# Altium integrated library StudentsLibrary.IntLib: 806 symbols (part 5 of 10)
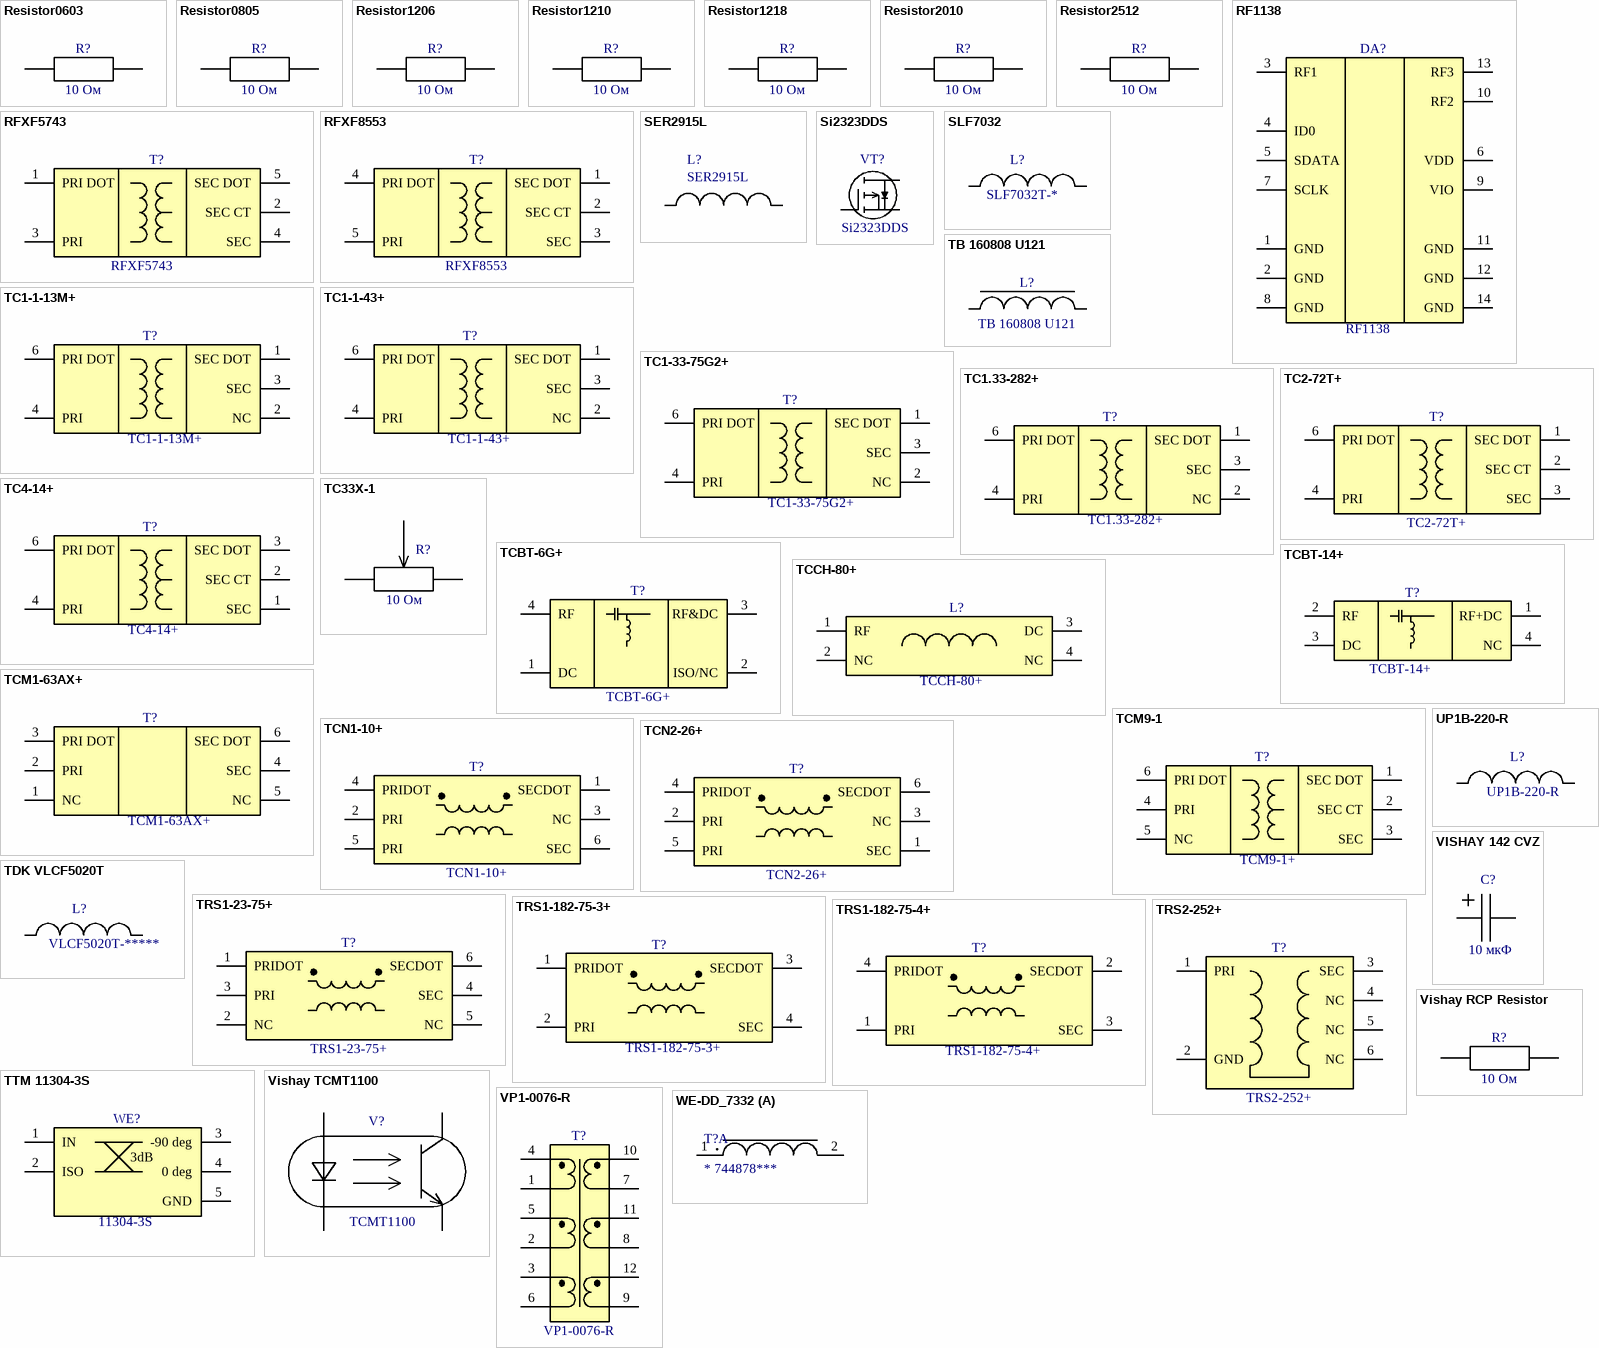
[diagram p51: symbols Resistor0603 to WE-DD_7332]

## VISHAY 142 CVZ
designator C?, comment 10 мкФ
Aluminum Electrolytic Capacitors SMD (Chip), High Temperature, Low Impedance; PartNumber: MAL2142*******; Manufacturer: Vishay; Tolerance: ±20%; Value: 10 мкФ; VDC: *; Package: *; ESR: *
footprint VISHAY 142 CVZ 0406 (VISHAY CAPAE 142 CVZ 4x4x5.7)
footprint VISHAY 142 CVZ 0506 (VISHAY CAPAE 142 CVZ 4x5x5.7)
footprint VISHAY 142 CVZ 0606 (VISHAY CAPAE 142 CVZ 6.3x6.3x5.7)
footprint VISHAY 142 CVZ 0608 (VISHAY CAPAE 142 CVZ 6.3x6.3x7.7)
footprint VISHAY 142 CVZ 0807 (VISHAY CAPAE 142 CVZ 8x8x6.5)
footprint VISHAY 142 CVZ 0810 (VISHAY CAPAE 142 CVZ 8x8x10)
footprint VISHAY 142 CVZ 1010 (VISHAY CAPAE 142 CVZ 10x10x10)
footprint VISHAY 142 CVZ 1213 (VISHAY CAPAE 142 CVZ 12.5x12.5x12.5)
pins: 1, 2

## Vishay RCP Resistor
designator R?, comment 10 Ом
Thick Film Chip Resistors, Industrial, High Power, Aluminum Nitride Substrate, RCP Series, Vishay; PartNumber: RCP0505*; Value: 10 Ом; Tolerance: *; Power: *; Manufacturer: Vishay; Package: 0505
footprint Vishay RCP0505B (Resistor, Chip; 1.40 mm L X 1.27 mm W X 0.64 mm H body)
footprint Vishay RCP0505W (Resistor, Chip; 1.40 mm L X 1.27 mm W X 0.64 mm H body)
pins: 1, 2

## Vishay TCMT1100
designator V?, comment TCMT1100
Optocoupler, Phototransistor Output, Single  Channel, Half Pitch Mini-Flat Package; Manufacturer: Vishay; PartNumber: TCMT1100; ComponentLink1Description: Product Page; ComponentLink1URL: https://www.vishay.com/en/product/83510/; ComponentLink2Description: DataSheet; ComponentLink2URL: https://www.vishay.com/docs/83510/tcmt11.pdf
footprint SOIC4P127_260X700X220L55X40N (Small Outline IC (SOIC), 1.27 mm pitch; 4 pin, 2.60 mm L X 4.40 mm W X 2.20 mm H body)
pins: 1 VD_A, 2 VD_C, 3 VT_E "emitter", 4 VT_C "collector"

## VP1-0076-R
designator T?
1:1 x6 Transformer. Power ranges from 1 W to 70 W while frequency ranges to over 1 MHz.; Manufacturer: Eaton; PartNumber: VP1-0076-R; ComponentLink1Description: ProductPage; ComponentLink1URL: https://www.eaton.com/us/en-us/catalog/electronic-components/vp-transformer.html
footprint EATON VP-1 (EATON VP-1 Transformer)
pins: 1, 2, 3, 4, 5, 6, 7, 8, 9, 10, 11, 12

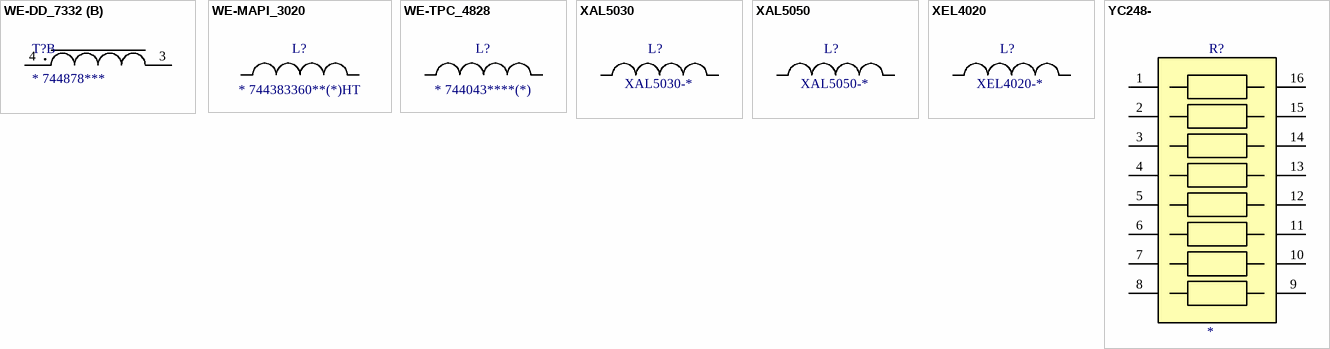
[diagram p15: symbols WE-DD_7332 to YC248-]

## WE-DD_7332
designator T?, comment * 744878***
WE-DD SMT Shielded Coupled Inductor, 1:1; Manufacturer: Wurth Elektronik; Config: Straight; Value: *; Tolerance: *; DCR: *; SRF: *; ISAT: *; IRMS: *; ComponentLink1Description: Product Page; ComponentLink1URL: https://www.we-online.com/en/components/products/WE-DD; PartNumber: 744878***
footprint WE-DD_7332 (SMT Shielded Coupled Inductor, 4-Leads, body 7.3x7.3mm)
part A pins: 1, 2
part B pins: 3, 4

## WE-MAPI_3020
designator L?, comment * 744383360**(*)HT
SMT Shielded Power Inductor, body 3.00 x 3.00 mm; Manufacturer: Wurth Elektronik; Value: *; PartNumber: 744383360**(*)HT; Tolerance: *; DCR: *; IRMS: *; ISAT: *; SRF: *; ComponentLink1Description: Product Page; ComponentLink1URL: https://www.we-online.com/en/components/products/WE-MAPI#/articles/WE-MAPI-SIZE-3020-HT
footprint WE-MAPI_3020 (SMT Shielded Power Inductor, body 3.00 x 3.00 mm)
pins: 1, 2

## WE-TPC_4828
designator L?, comment * 744043****(*)
SMT Tiny Power Inductor, body 4.8x4.8x2.8mm; Manufacturer: Wurth Elektronik; Value: *; PartNumber: 744043****(*); Tolerance: *; DCR: *; IRMS: *; ISAT: *; SRF: *
footprint WE-TPC_4828 (SMT Tiny Power Inductor, body 4.8x4.8x2.8mm)
pins: 1, 2

## XAL5030
designator L?, comment XAL5030-*
Colicraft Shielded Power Inductors; Manufacturer: Coilcraft; Tolerance: ±20%; PartNumber: XAL5030-*; Value: *; DCR: *; SRF: *; ISAT: *; ComponentLink1Description: Product Page; ComponentLink1URL: https://www.coilcraft.com/en-us/products/power/shielded-inductors/molded-inductor/xal/xal50xx/; IRMS: *
footprint XAL5030 (Coilcraft XAL5030- series)
pins: 1, 2

## XAL5050
designator L?, comment XAL5050-*
Colicraft Shielded Power Inductors; Manufacturer: Coilcraft; Tolerance: ±20%; PartNumber: XAL5050-*; Value: *; DCR: *; SRF: *; ISAT: *; ComponentLink1Description: Product Page; ComponentLink1URL: https://www.coilcraft.com/en-us/products/power/shielded-inductors/molded-inductor/xal/xal50xx/; IRMS: *
footprint XAL5050 (Coilcraft XAL5050- series)
pins: 1, 2

## XEL4020
designator L?, comment XEL4020-*
Colicraft Shielded Power Inductors; Manufacturer: Coilcraft; Tolerance: ±20%; PartNumber: XEL4020-*; Value: *; DCR: *; SRF: *; ISAT: *; ComponentLink1Description: Product Page; ComponentLink1URL: https://www.coilcraft.com/en-us/products/power/shielded-inductors/molded-inductor/xel/xel4020/xel4020-122/; IRMS: *
footprint XEL4020 (Coilcraft XEL4020- series)
pins: 1, 2

## YC248-
designator R?
Array Chip Resistor 16Pin/8R 5%, 1%, 0616; PartNumber: YC248-**-******; Manufacturer: Yageo; DCV: 50 В; Power: 1/16 Вт; Value: *; Tolerance: ±*; Package: 0616; ComponentLink1Description: Product Page; ComponentLink1URL: https://www.yageo.com/en/Product/Index/rchip/array_network/yc; ComponentLink2Description: DataSheet; ComponentLink2URL: https://www.yageo.com/upload/media/product/products/datasheet/rchip/PYu-YC_TC_group_51_RoHS_L_9.pdf
footprint RESCAXE16P50_400X160X55L40X45N (Resistor, Chip Array, 2 Side Convex, 0.50 mm pitch; 16 pin, 4.00 mm L X 1.60 mm W X 0.55 mm H body)
pins: 1, 2, 3, 4, 5, 6, 7, 8, 9, 10, 11, 12, 13, 14, 15, 16


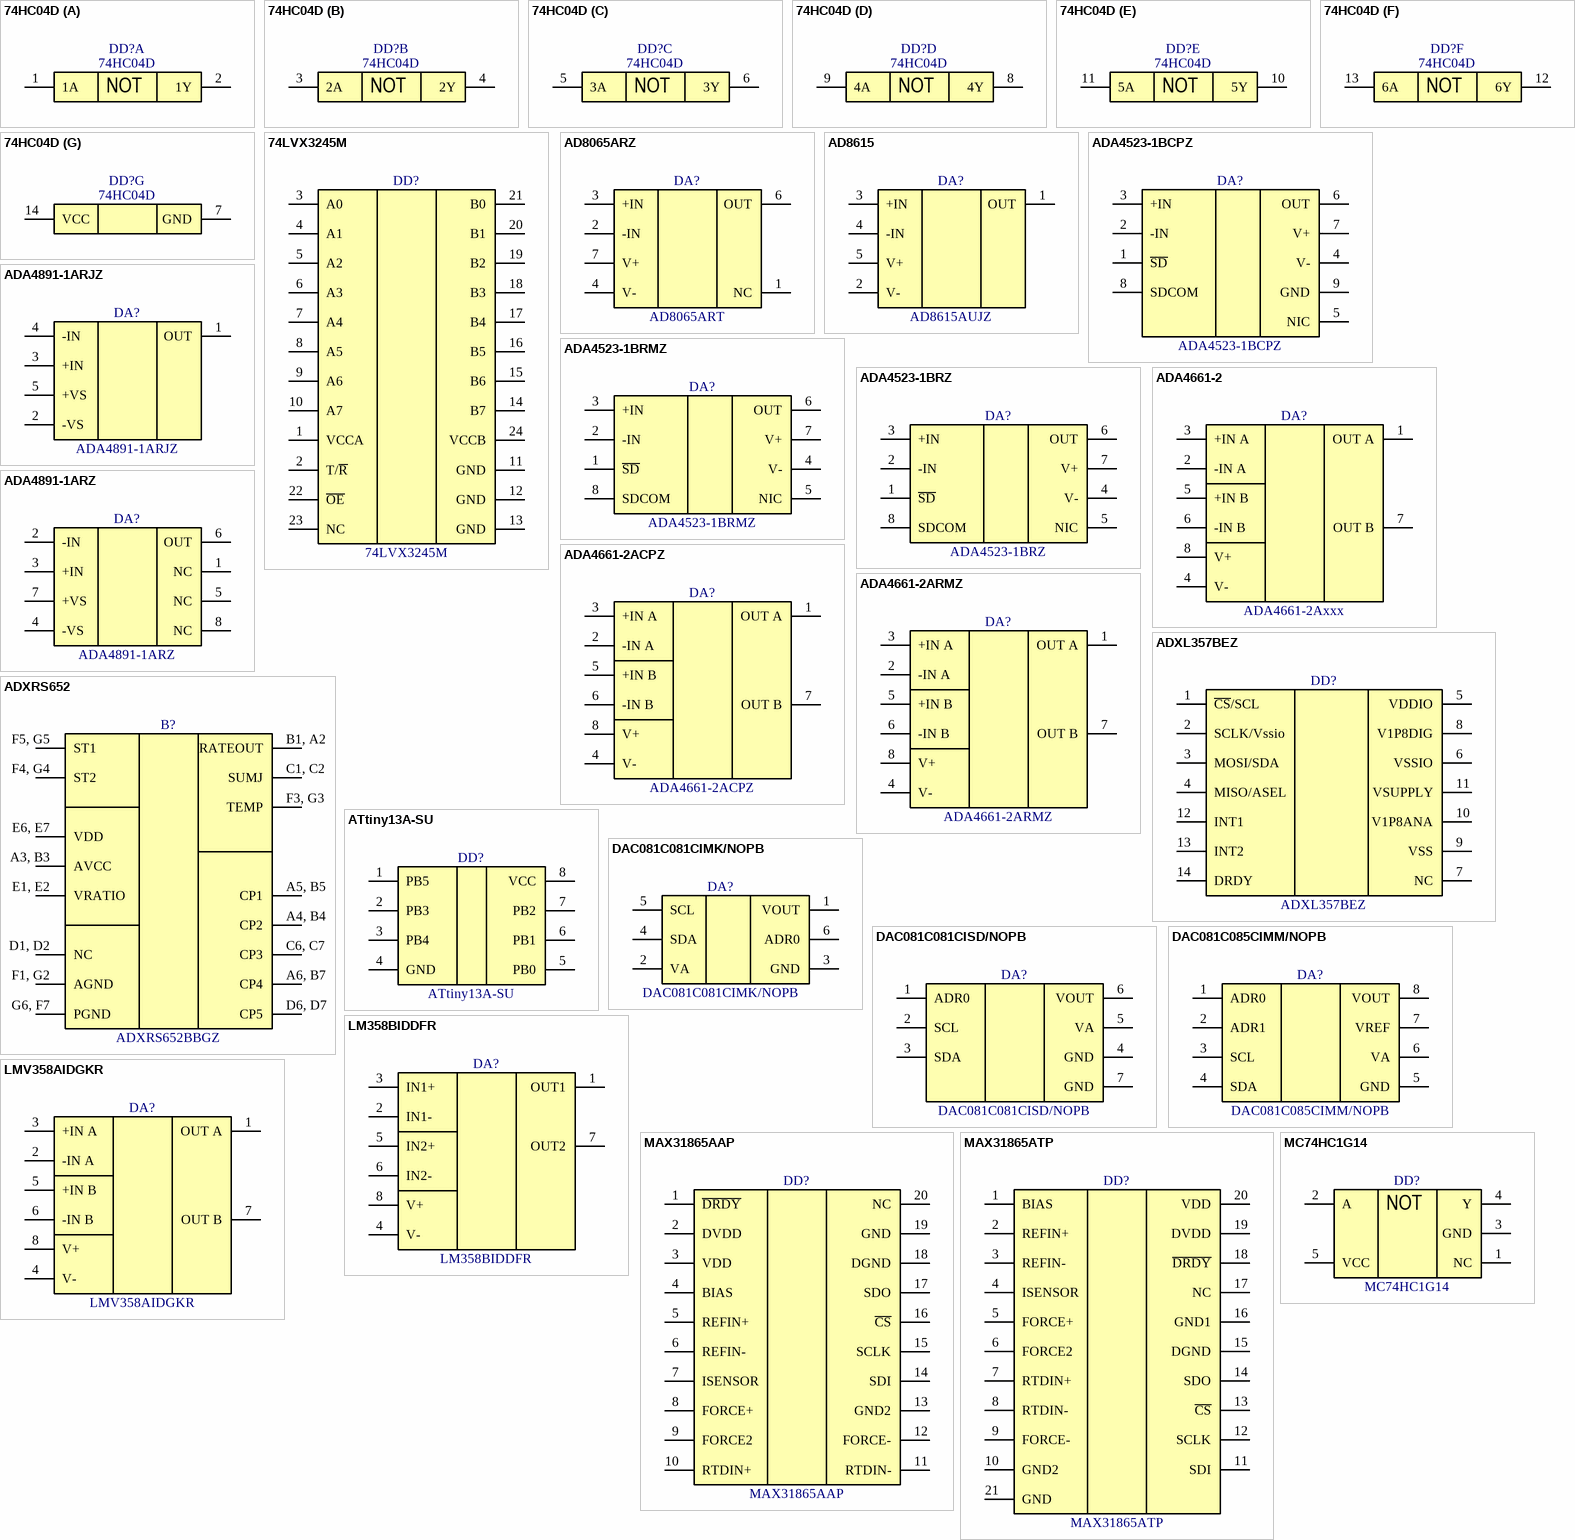
[diagram p16: symbols 74HC04D to MC74HC1G14]

## 74HC04D
designator DD?
Hex inverter; Manufacturer: OnSemi; PartNumber: 74HC04D; ComponentLink1Description: Digikey Datasheet Link; ComponentLink1URL: https://media.digikey.com/pdf/Data%20Sheets/ON%20Semiconductor%20PDFs/74HC04.pdf
footprint SOIC14P127_865X600X175L70X42N (Small Outline IC (SOIC), 1.27 mm pitch; 14 pin, 8.65 mm L X 3.90 mm W X 1.75 mm H body)
part A pins: 1 1A, 2 1Y
part B pins: 3 2A, 4 2Y
part C pins: 5 3A, 6 3Y
part D pins: 8 4Y, 9 4A
part E pins: 10 5Y, 11 5A
part F pins: 12 6Y, 13 6A
part G pins: 7 GND, 14 VCC
part A text: NOT
part B text: NOT
part C text: NOT
part D text: NOT
part E text: NOT
part F text: NOT

## 74LVX3245M
designator DD?
8-Bit Dual-Supply Translator with 3-State Outputs; Manufacturer: STMicroelectronics; PartNumber: 74LVX3245M
footprint SOP24P65_780X640X110L60X24N (Small Outline Pkg (SOP), 0.65 mm pitch; 24 pin, 7.80 mm L X 4.40 mm W X 1.10 mm H body)
pins: 1 VCCA, 2 T/~{R}, 3 A0, 4 A1, 5 A2, 6 A3, 7 A4, 8 A5, 9 A6, 10 A7, 11 GND, 12 GND, 13 GND, 14 B7, 15 B6, 16 B5, 17 B4, 18 B3, 19 B2, 20 B1, 21 B0, 22 ~{OE}, 23 NC, 24 VCCB

## AD8065ARZ
designator DA?, comment AD8065ART
High Performance, 145 MHz FastFET™ Op Amps / Single, SOIC_N; Manufacturer: Analog Devices; PartNumber: AD8065ART; ComponentLink1Description: Product Page; ComponentLink1URL: https://www.analog.com/en/products/ad8065.html; ComponentLink2Description: DataSheet; ComponentLink2URL: https://www.analog.com/media/en/technical-documentation/data-sheets/AD8065_8066.pdf
footprint SOIC8P127_490X600X175L83X41N (Small Outline IC (SOIC), 1.27 mm pitch; 8 pin, 4.90 mm L X 3.90 mm W X 1.75 mm H body)
pins: 1 NC, 2 -IN, 3 +IN, 4 V-, 6 OUT, 7 V+

## AD8615
designator DA?, comment AD8615AUJZ
Precision, 20 MHz, CMOS, Rail-to-Rail Input/Output Operational Amplifier; Manufacturer: Analog Devices; PartNumber: AD8615AUJZ; ComponentLink1Description: Product Page; ComponentLink1URL: https://www.analog.com/en/products/ad8615.html; ComponentLink2Description: DataSheet; ComponentLink2URL: https://www.analog.com/media/en/technical-documentation/data-sheets/AD8615_8616_8618.pdf
footprint SOT23-5P95_280X100L45X40N (Small Outline Transistor (SOT23), 0.95 mm pitch; 5 pin, 2.90 mm L X 1.60 mm W X 1.00 mm H body)
pins: 1 OUT, 2 V-, 3 +IN, 4 -IN, 5 V+

## ADA4523-1BCPZ
designator DA?
36 V, Low Noise, Zero Drift Op Amp, CP-8-29 (LFCSP); Manufacturer: Analog Devices; PartNumber: ADA4523-1BCPZ; ComponentLink1Description: Product Page; ComponentLink1URL: https://www.analog.com/en/products/ada4523-1.html; ComponentLink2Description: DataSheet; ComponentLink2URL: https://www.analog.com/media/en/technical-documentation/data-sheets/ada4523-1.pdf
footprint SON9P50_300X300X80L40X25T238X165N (Small Outline No-Lead (SON with Tab), 0.50 mm pitch; 8 pin, 3.00 mm L X 3.00 mm W X 0.80 mm H body)
pins: 1 ~{SD}, 2 -IN, 3 +IN, 4 V-, 5 NIC, 6 OUT, 7 V+, 8 SDCOM, 9 GND

## ADA4523-1BRMZ
designator DA?
36 V, Low Noise, Zero Drift Op Amp, RM-8 (MSOP); Manufacturer: Analog Devices; PartNumber: ADA4523-1BRMZ; ComponentLink1Description: Product Page; ComponentLink1URL: https://www.analog.com/en/products/ada4523-1.html; ComponentLink2Description: DataSheet; ComponentLink2URL: https://www.analog.com/media/en/technical-documentation/data-sheets/ada4523-1.pdf
footprint SOP8P65_300X490X110L60X32N (Small Outline Pkg (SOP), 0.65 mm pitch; 8 pin, 3.00 mm L X 3.00 mm W X 1.10 mm H body)
pins: 1 ~{SD}, 2 -IN, 3 +IN, 4 V-, 5 NIC, 6 OUT, 7 V+, 8 SDCOM

## ADA4523-1BRZ
designator DA?
36 V, Low Noise, Zero Drift Op Amp, R-8 (SOIC_N); Manufacturer: Analog Devices; PartNumber: ADA4523-1BRZ; ComponentLink1Description: Product Page; ComponentLink1URL: https://www.analog.com/en/products/ada4523-1.html; ComponentLink2Description: DataSheet; ComponentLink2URL: https://www.analog.com/media/en/technical-documentation/data-sheets/ada4523-1.pdf
footprint SOIC8P127_490X600X175L83X41N (Small Outline IC (SOIC), 1.27 mm pitch; 8 pin, 4.90 mm L X 3.90 mm W X 1.75 mm H body)
pins: 1 ~{SD}, 2 -IN, 3 +IN, 4 V-, 5 NIC, 6 OUT, 7 V+, 8 SDCOM

## ADA4661-2
designator DA?, comment ADA4661-2Axxx
18 V, Precision, 725 μA, 4 MHz, CMOS RRIO Operational Amplifier; Manufacturer: Analog Devices; PartNumber: ADA4661-2Axxx; ComponentLink1Description: Product Page; ComponentLink1URL: https://www.analog.com/en/products/ADA4661-2.html; ComponentLink2Description: DataSheet; ComponentLink2URL: https://www.analog.com/media/en/technical-documentation/data-sheets/ADA4661-2.pdf
footprint TSOP65P490X110-8N (TSOP, 8-Leads, Body 3.00x3.00mm, Pitch 0.65mm, IPC Medium Density)
footprint SON50P300X80_HS-9N (SON, 8-Leads, Body 3.00x3.00mm, Pitch 0.50mm, Thermal Pad 2.34x1.49mm, IPC Medium Density)
pins: 1 OUT A, 2 -IN A, 3 +IN A, 4 V-, 5 +IN B, 6 -IN B, 7 OUT B, 8 V+

## ADA4661-2ACPZ
designator DA?
18 V, Precision, 725 μA, 4 MHz, CMOS RRIO Operational Amplifier, CP-8-11 (LFCSP_WD); Manufacturer: Analog Devices; PartNumber: ADA4661-2ACPZ; ComponentLink1Description: Product Page; ComponentLink1URL: https://www.analog.com/en/products/ADA4661-2.html; ComponentLink2Description: DataSheet; ComponentLink2URL: https://www.analog.com/media/en/technical-documentation/data-sheets/ADA4661-2.pdf
footprint SON50P300X80_HS-9N (SON, 8-Leads, Body 3.00x3.00mm, Pitch 0.50mm, Thermal Pad 2.34x1.49mm, IPC Medium Density)
pins: 1 OUT A, 2 -IN A, 3 +IN A, 4 V-, 5 +IN B, 6 -IN B, 7 OUT B, 8 V+

## ADA4661-2ARMZ
designator DA?
18 V, Precision, 725 μA, 4 MHz, CMOS RRIO Operational Amplifier, RM-8 (MSOP); Manufacturer: Analog Devices; PartNumber: ADA4661-2ARMZ; ComponentLink1Description: Product Page; ComponentLink1URL: https://www.analog.com/en/products/ADA4661-2.html; ComponentLink2Description: DataSheet; ComponentLink2URL: https://www.analog.com/media/en/technical-documentation/data-sheets/ADA4661-2.pdf
footprint TSOP65P490X110-8N (TSOP, 8-Leads, Body 3.00x3.00mm, Pitch 0.65mm, IPC Medium Density)
pins: 1 OUT A, 2 -IN A, 3 +IN A, 4 V-, 5 +IN B, 6 -IN B, 7 OUT B, 8 V+

## ADA4891-1ARJZ
designator DA?
Low Cost CMOS, High Speed, Rail-to-Rail Amplifiers, SOT-23; Manufacturer: Analog Devices; PartNumber: ADA4891-1ARJZ; ComponentLink1Description: Product Page; ComponentLink1URL: https://www.analog.com/en/products/ada4891-1.html; ComponentLink2Description: DataSheet; ComponentLink2URL: https://www.analog.com/media/en/technical-documentation/data-sheets/ADA4891-1_4891-2_4891-3_4891-4.PDF
footprint SOT23-5P95_280X145L45X42N (Small Outline Transistor (SOT23), 0.95 mm pitch; 5 pin, 2.90 mm L X 1.60 mm W X 1.45 mm H body)
pins: 1 OUT, 2 -VS, 3 +IN, 4 -IN, 5 +VS

## ADA4891-1ARZ
designator DA?
Low Cost CMOS, High Speed, Rail-to-Rail Amplifiers, SOIC_N; Manufacturer: Analog Devices; PartNumber: ADA4891-1ARZ; ComponentLink1Description: Product Page; ComponentLink1URL: https://www.analog.com/en/products/ada4891-1.html; ComponentLink2Description: DataSheet; ComponentLink2URL: https://www.analog.com/media/en/technical-documentation/data-sheets/ADA4891-1_4891-2_4891-3_4891-4.PDF
footprint SOIC8P127_490X600X175L83X41N (Small Outline IC (SOIC), 1.27 mm pitch; 8 pin, 4.90 mm L X 3.90 mm W X 1.75 mm H body)
pins: 1 NC, 2 -IN, 3 +IN, 4 -VS, 5 NC, 6 OUT, 7 +VS, 8 NC

## ADXL357BEZ
designator DD?
Low Noise, Low Drift, Low Power, 3-Axis MEMS Accelerometers; Manufacturer: Analog Devices; PartNumber: ADXL357BEZ; ComponentLink1Description: Product Page; ComponentLink1URL: https://www.analog.com/en/products/ADXL357.html; ComponentLink2Description: DataSheet; ComponentLink2URL: https://www.analog.com/media/en/technical-documentation/data-sheets/adxl356-357.pdf
footprint LCCS14P127_605X605X220L91X50N (Leadless Chip Carrier (LCC), 1.27 mm pitch; square, 4 pin X 3 pin, 6.05 mm L X 6.05 mm W X 2.20 mm H body)
pins: 1 ~{CS}/SCL, 2 SCLK/Vssio, 3 MOSI/SDA, 4 MISO/ASEL, 5 VDDIO, 6 VSSIO, 7 NC, 8 V1P8DIG, 9 VSS, 10 V1P8ANA, 11 VSUPPLY, 12 INT1, 13 INT2, 14 DRDY

## ADXRS652
designator B?, comment ADXRS652BBGZ
±250°/sec Yaw Rate Gyro; Manufacturer: Analog Devices; PartNumber: ADXRS652BBGZ; ComponentLink1Description: Product Page; ComponentLink1URL: https://www.analog.com/en/products/adxrs652.html; ComponentLink2Description: DataSheet; ComponentLink2URL: https://www.analog.com/media/en/technical-documentation/data-sheets/ADXRS652.pdf; ComponentLink3Description: User Guide; ComponentLink3URL: https://www.analog.com/media/en/technical-documentation/user-guides/UG-153.pdf
footprint BGA32CP80_7X7_687X687X380B55N (Ball Grid Array (BGA), 0.80 mm pitch, square; 32 pin, 6.875 mm L X 6.875 mm W X 3.80 mm H body)
pins: A3, B3 AVCC, A4, B4 CP2, A5, B5 CP1, A6, B7 CP4, B1, A2 RATEOUT, C1, C2 SUMJ, C6, C7 CP3, D1, D2 NC, D6, D7 CP5, E1, E2 VRATIO, E6, E7 VDD, F1, G2 AGND, F3, G3 TEMP, F4, G4 ST2, F5, G5 ST1, G6, F7 PGND

## ATtiny13A-SU
designator DD?
Microcontroller with 1K Bytes / In-System Programmable Flash; Manufacturer: Microchip; PartNumber: ATtiny13A-SU; ComponentLink1Description: Product Page; ComponentLink1URL: https://www.microchip.com/en-us/product/ATtiny13A; ComponentLink2Description: DataSheet; ComponentLink2URL: https://ww1.microchip.com/downloads/aemDocuments/documents/MCU08/ProductDocuments/DataSheets/ATtiny13A-Data-Sheet-DS40002307A.pdf
footprint SOIC8P127_524X798X216L68X40N (Small Outline IC (SOIC), 1.27 mm pitch; 8 pin, 5.24 mm L X 5.29 mm W X 2.16 mm H body)
pins: 1 PB5, 2 PB3, 3 PB4, 4 GND, 5 PB0, 6 PB1, 7 PB2, 8 VCC

## DAC081C081CIMK/NOPB
designator DA?
AC081C08x 8-Bit Micro Power Digital-to-Analog Converter With An I2C-Compatible / Interface, SOT-23-THIN; Manufacturer: Texas Instruments; PartNumber: DAC081C081CIMK/NOPB; ComponentLink1Description: Product Page; ComponentLink1URL: https://www.ti.com/product/DAC081C081; ComponentLink2Description: DataSheet; ComponentLink2URL: https://www.ti.com/lit/gpn/dac081c081
footprint SOT95P280X110-6N (SOT23, 6-Leads, Body 2.90x2.80mm, Pitch 0.95mm, IPC Medium Density)
pins: 1 VOUT, 2 VA, 3 GND, 4 SDA, 5 SCL, 6 ADR0

## DAC081C081CISD/NOPB
designator DA?
AC081C08x 8-Bit Micro Power Digital-to-Analog Converter With An I2C-Compatible / Interface, WSON; Manufacturer: Texas Instruments; PartNumber: DAC081C081CISD/NOPB; ComponentLink1Description: Product Page; ComponentLink1URL: https://www.ti.com/product/DAC081C081; ComponentLink2Description: DataSheet; ComponentLink2URL: https://www.ti.com/lit/gpn/dac081c081
footprint SON7P65_220X250X80L40X25T120X75N (Small Outline No-Lead (SON with Tab), 0.65 mm pitch; 6 pin, 2.20 mm L X 2.50 mm W X 0.80 mm H body)
pins: 1 ADR0, 2 SCL, 3 SDA, 4 GND, 5 VA, 6 VOUT, 7 GND

## DAC081C085CIMM/NOPB
designator DA?
AC081C08x 8-Bit Micro Power Digital-to-Analog Converter With An I2C-Compatible / Interface, VSSOP; Manufacturer: Texas Instruments; PartNumber: DAC081C085CIMM/NOPB; ComponentLink1Description: Product Page; ComponentLink1URL: https://www.ti.com/product/DAC081C081; ComponentLink2Description: DataSheet; ComponentLink2URL: https://www.ti.com/lit/gpn/dac081c081
footprint SOP8P65_300X490X110L55X31N (Small Outline Pkg (SOP), 0.65 mm pitch; 8 pin, 3.00 mm L X 3.00 mm W X 1.10 mm H body)
pins: 1 ADR0, 2 ADR1, 3 SCL, 4 SDA, 5 GND, 6 VA, 7 VREF, 8 VOUT

## LM358BIDDFR
designator DA?
Dual, 36-V, 1.2-MHz, 3-mV offset voltage operational amplifier with -40°C to 85°C operation; Manufacturer: Texas Instruments; ComponentLink1Description: Product Page; ComponentLink1URL: https://www.ti.com/product/LM358B; PartNumber: LM358BIDDFR; ComponentLink2Description: DataSheet; ComponentLink2URL: https://www.ti.com/lit/gpn/lm358b
footprint SOT23-8P65_280X110L45X30N (Small Outline Transistor (SOT23), 0.65 mm pitch; 8 pin, 2.90 mm L X 1.60 mm W X 1.10 mm H body)
pins: 1 OUT1, 2 IN1-, 3 IN1+, 4 V-, 5 IN2+, 6 IN2-, 7 OUT2, 8 V+

## LMV358AIDGKR
designator DA?
Dual, 5.5-V, 1-MHz, 4-mV offset voltage, RRO operational amplifier, VSSOP-8; Manufacturer: Texas Instruments; PartNumber: LMV358AIDGKR; ComponentLink1Description: Product Page; ComponentLink1URL: https://www.ti.com/product/LMV358A; ComponentLink2Description: DataSheet; ComponentLink2URL: https://www.ti.com/lit/gpn/lmv358a
footprint SOP8P65_300X490X110L55X33N (Small Outline Pkg (SOP), 0.65 mm pitch; 8 pin, 3.00 mm L X 3.00 mm W X 1.10 mm H body)
pins: 1 OUT A, 2 -IN A, 3 +IN A, 4 V-, 5 +IN B, 6 -IN B, 7 OUT B, 8 V+

## MAX31865AAP
designator DD?
RTD-to-Digital Converter, SSOP; Manufacturer: Analog Devices; PartNumber: MAX31865AAP; ComponentLink1Description: Product Page; ComponentLink1URL: https://www.analog.com/en/products/max31865.html; ComponentLink2Description: DataSheet; ComponentLink2URL: https://www.analog.com/media/en/technical-documentation/data-sheets/MAX31865.pdf; ComponentLink3Description: Package Outline; ComponentLink3URL: http://pdfserv.maximintegrated.com/package_dwgs/21-0056.PDF; ComponentLink4Description: Land Pattern; ComponentLink4URL: http://pdfserv.maximintegrated.com/land_patterns/90-0094.PDF
footprint SOP20P65_720X777X200L79X31N (Small Outline Pkg (SOP), 0.65 mm pitch; 20 pin, 7.20 mm L X 5.29 mm W X 2.00 mm H body)
pins: 1 ~{DRDY}, 2 DVDD, 3 VDD, 4 BIAS, 5 REFIN+, 6 REFIN-, 7 ISENSOR, 8 FORCE+, 9 FORCE2, 10 RTDIN+, 11 RTDIN-, 12 FORCE-, 13 GND2, 14 SDI, 15 SCLK, 16 ~{CS}, 17 SDO, 18 DGND, 19 GND, 20 NC

## MAX31865ATP
designator DD?
RTD-to-Digital Converter, TQFN; Manufacturer: Analog Devices; PartNumber: MAX31865ATP; ComponentLink1Description: Product Page; ComponentLink1URL: https://www.analog.com/en/products/max31865.html; ComponentLink2Description: DataSheet; ComponentLink2URL: https://www.analog.com/media/en/technical-documentation/data-sheets/MAX31865.pdf; ComponentLink3Description: Package Outline; ComponentLink3URL: http://pdfserv.maximintegrated.com/package_dwgs/21-0140.PDF; ComponentLink4Description: Land Pattern; ComponentLink4URL: http://pdfserv.maximintegrated.com/land_patterns/90-0010.PDF
footprint QFN21P65_500X500X80L40X30T325N (Quad Flat No-Lead (QFN with Tab), 0.65 mm pitch; square, 5 pin X 5 pin, 5.00 mm L X 5.00 mm W X 0.80 mm H body)
pins: 1 BIAS, 2 REFIN+, 3 REFIN-, 4 ISENSOR, 5 FORCE+, 6 FORCE2, 7 RTDIN+, 8 RTDIN-, 9 FORCE-, 10 GND2, 11 SDI, 12 SCLK, 13 ~{CS}, 14 SDO, 15 DGND, 16 GND1, 17 NC, 18 ~{DRDY}, 19 DVDD, 20 VDD, 21 GND

## MC74HC1G14
designator DD?
Single Inverter with  Schmitt-Trigger Input; Manufacturer: OnSemi; PartNumber: MC74HC1G14; ComponentLink1Description: Product Page; ComponentLink1URL: https://www.onsemi.com/products/timing-logic-memory/standard-logic/buffers/mc74hc1g14; ComponentLink2Description: DataSheet; ComponentLink2URL: https://www.onsemi.com/download/data-sheet/pdf/mc74hc1g14-d.pdf
footprint SOT23-5P65_210X110L20X20N (Small Outline Transistor (SOT23), 0.65 mm pitch; 5 pin, 2.00 mm L X 1.25 mm W X 1.10 mm H body)
pins: 1 NC, 2 A, 3 GND, 4 Y, 5 VCC
text: NOT

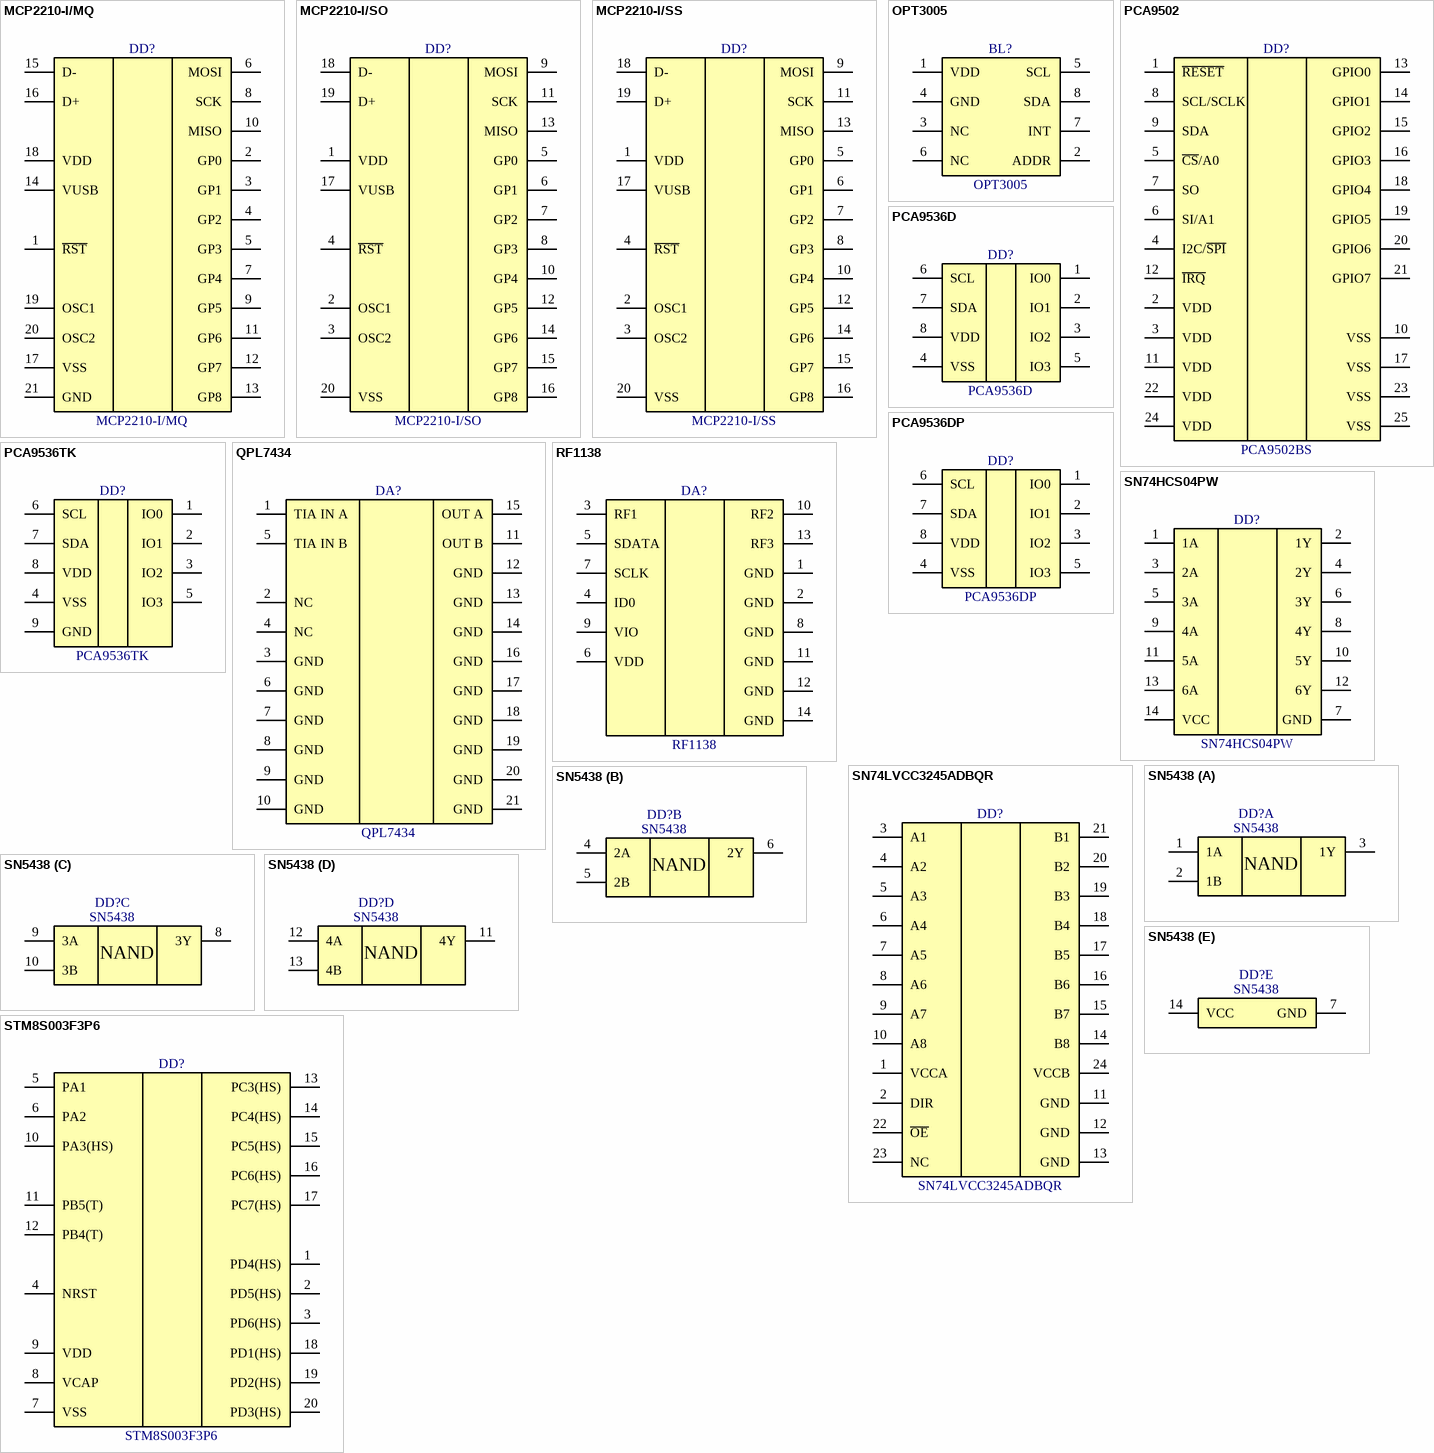
[diagram p17: symbols MCP2210-I/MQ to STM8S003F3P6]

## MCP2210-I/MQ
designator DD?
USB to SPI Converter with GPIO (Master Mode), QFN20; Manufacturer: Microchip; PartNumber: MCP2210-I/MQ; ComponentLink1Description: Product Page; ComponentLink1URL: https://www.microchip.com/en-us/product/MCP2210; ComponentLink2Description: DataSheet; ComponentLink2URL: https://ww1.microchip.com/downloads/aemDocuments/documents/APID/ProductDocuments/DataSheets/MCP2210-USB-to-SPI-Protocol-Converter-with-GPIO-%28Host-Mode%29-20002288C.pdf
footprint QFN21P65_500X500X100L40X30T325N (Quad Flat No-Lead (QFN with Tab), 0.65 mm pitch; square, 5 pin X 5 pin, 5.00 mm L X 5.00 mm W X 1.00 mm H body)
pins: 1 ~{RST}, 2 GP0, 3 GP1, 4 GP2, 5 GP3, 6 MOSI, 7 GP4, 8 SCK, 9 GP5, 10 MISO, 11 GP6, 12 GP7, 13 GP8, 14 VUSB, 15 D-, 16 D+, 17 VSS, 18 VDD, 19 OSC1, 20 OSC2, 21 GND

## MCP2210-I/SO
designator DD?
USB to SPI Converter with GPIO (Master Mode), 20 SOIC; Manufacturer: Microchip; PartNumber: MCP2210-I/SO; ComponentLink1Description: Product Page; ComponentLink1URL: https://www.microchip.com/en-us/product/MCP2210; ComponentLink2Description: DataSheet; ComponentLink2URL: https://ww1.microchip.com/downloads/aemDocuments/documents/APID/ProductDocuments/DataSheets/MCP2210-USB-to-SPI-Protocol-Converter-with-GPIO-%28Host-Mode%29-20002288C.pdf
footprint SOIC20P127_1280X1030X265L65X41N (Small Outline IC (SOIC), 1.27 mm pitch; 20 pin, 12.80 mm L X 7.50 mm W X 2.65 mm H body)
pins: 1 VDD, 2 OSC1, 3 OSC2, 4 ~{RST}, 5 GP0, 6 GP1, 7 GP2, 8 GP3, 9 MOSI, 10 GP4, 11 SCK, 12 GP5, 13 MISO, 14 GP6, 15 GP7, 16 GP8, 17 VUSB, 18 D-, 19 D+, 20 VSS

## MCP2210-I/SS
designator DD?
USB to SPI Converter with GPIO (Master Mode), 20 SSOP; Manufacturer: Microchip; PartNumber: MCP2210-I/SS; ComponentLink1Description: Product Page; ComponentLink1URL: https://www.microchip.com/en-us/product/MCP2210; ComponentLink2Description: DataSheet; ComponentLink2URL: https://ww1.microchip.com/downloads/aemDocuments/documents/APID/ProductDocuments/DataSheets/MCP2210-USB-to-SPI-Protocol-Converter-with-GPIO-%28Host-Mode%29-20002288C.pdf
footprint SOP20P65_720X780X200L75X30N (Small Outline Pkg (SOP), 0.65 mm pitch; 20 pin, 7.20 mm L X 5.30 mm W X 2.00 mm H body)
pins: 1 VDD, 2 OSC1, 3 OSC2, 4 ~{RST}, 5 GP0, 6 GP1, 7 GP2, 8 GP3, 9 MOSI, 10 GP4, 11 SCK, 12 GP5, 13 MISO, 14 GP6, 15 GP7, 16 GP8, 17 VUSB, 18 D-, 19 D+, 20 VSS

## OPT3005
designator BL?
Ambient light sensor (ALS) for video surveillance cameras; Manufacturer: Texas Instruments; PartNumber: OPT3005; ComponentLink1Description: Product Page; ComponentLink1URL: https://www.ti.com/product/OPT3005; ComponentLink2Description: DataSheet; ComponentLink2URL: https://www.ti.com/lit/gpn/opt3005
footprint OPT3005 (Integrated Circuit (IC), Small Outline Flat Lead (SOFL), 0.50 mm pitch; 8 pin, 2.10 mm L X 1.20 mm W X 0.60 mm H body)
pins: 1 VDD, 2 ADDR, 3 NC, 4 GND, 5 SCL, 6 NC, 7 INT, 8 SDA

## PCA9502
designator DD?, comment PCA9502BS
8-bit I/O expander with I2C-bus/SPI interface; Manufacturer: NXP; PartNumber: PCA9502BS; ComponentLink1Description: Product Page; ComponentLink1URL: https://www.nxp.com/products/interfaces/ic-spi-i3c-interface-devices/general-purpose-i-o-gpio/8-bit-i-o-expander-with-ic-bus-spi-interface:PCA9502BS; ComponentLink2Description: DataSheet; ComponentLink2URL: https://www.nxp.com/docs/en/data-sheet/PCA9502.pdf
footprint QFN25P50_400X400X100L40X24T260N (Quad Flat No-Lead (QFN with Tab), 0.50 mm pitch; square, 6 pin X 6 pin, 4.00 mm L X 4.00 mm W X 1.00 mm H body)
pins: 1 ~{RESET}, 2 VDD, 3 VDD, 4 I2C/~{SPI}, 5 ~{CS}/A0, 6 SI/A1, 7 SO, 8 SCL/SCLK, 9 SDA, 10 VSS, 11 VDD, 12 ~{IRQ}, 13 GPIO0, 14 GPIO1, 15 GPIO2, 16 GPIO3, 17 VSS, 18 GPIO4, 19 GPIO5, 20 GPIO6, 21 GPIO7, 22 VDD, 23 VSS, 24 VDD, 25 VSS

## PCA9536D
designator DD?
4-bit I2C-bus and SMBus I/O port, SO8; Manufacturer: NXP; PartNumber: PCA9536D; ComponentLink1Description: Product Page; ComponentLink1URL: https://www.nxp.com/part/PCA9536D#/; ComponentLink2Description: DataSheet; ComponentLink2URL: https://www.nxp.com/docs/en/data-sheet/PCA9536.pdf
footprint SOIC8P127_490X600X175L70X42N (Small Outline IC (SOIC), 1.27 mm pitch; 8 pin, 4.90 mm L X 3.90 mm W X 1.75 mm H body)
pins: 1 IO0, 2 IO1, 3 IO2, 4 VSS, 5 IO3, 6 SCL, 7 SDA, 8 VDD

## PCA9536DP
designator DD?
4-bit I2C-bus and SMBus I/O port, TSSOP8; Manufacturer: NXP; PartNumber: PCA9536DP; ComponentLink1Description: Product Page; ComponentLink1URL: https://www.nxp.com/part/PCA9536DP#/; ComponentLink2Description: DataSheet; ComponentLink2URL: https://www.nxp.com/docs/en/data-sheet/PCA9536.pdf
footprint SOP8P65_300X490X110L55X35N (Footprint not found)
pins: 1 IO0, 2 IO1, 3 IO2, 4 VSS, 5 IO3, 6 SCL, 7 SDA, 8 VDD

## PCA9536TK
designator DD?
4-bit I2C-bus and SMBus I/O port, HVSON8; Manufacturer: NXP; PartNumber: PCA9536TK; ComponentLink1Description: Product Page; ComponentLink1URL: https://www.nxp.com/part/PCA9536TK#/; ComponentLink2Description: DataSheet; ComponentLink2URL: https://www.nxp.com/docs/en/data-sheet/PCA9536.pdf
footprint SON9P50_300X300X100L40X25T210X150N (Small Outline No-Lead (SON with Tab), 0.50 mm pitch; 8 pin, 3.00 mm L X 3.00 mm W X 1.00 mm H body)
pins: 1 IO0, 2 IO1, 3 IO2, 4 VSS, 5 IO3, 6 SCL, 7 SDA, 8 VDD, 9 GND

## QPL7434
designator DA?
xPON Video Receiver; Manufacturer: Qorvo; PartNumber: QPL7434; ComponentLink1Description: Product Page; ComponentLink1URL: https://www.qorvo.com/products/p/QPL7434; ComponentLink2Description: DataSheet; ComponentLink2URL: https://www.qorvo.com/products/d/da006890
footprint QFN21P50_400X400X90L55X23T215N (Quad Flat No-Lead (QFN with Tab), 0.50 mm pitch; square, 5 pin X 5 pin, 4.00 mm L X 4.00 mm W X 0.90 mm H body)
pins: 1 TIA IN A, 2 NC, 3 GND, 4 NC, 5 TIA IN B, 6 GND, 7 GND, 8 GND, 9 GND, 10 GND, 11 OUT B, 12 GND, 13 GND, 14 GND, 15 OUT A, 16 GND, 17 GND, 18 GND, 19 GND, 20 GND, 21 GND

## RF1138
designator DA?
5 bit Tunable Capacitor with Switch; Manufacturer: Qorvo; PartNumber: RF1138; ComponentLink1Description: DataSheet; ComponentLink1URL: https://www.qorvo.com/products/d/da000312
footprint WLCSP14RCP40_4X5_158X198X60B26N (WLCSP, 0.40 mm pitch, rect.; 14 pin, 1.58 mm L X 1.98 mm W X 0.602 mm H body (w/reversed pins))
pins: 1 GND, 2 GND, 3 RF1, 4 ID0, 5 SDATA, 6 VDD, 7 SCLK, 8 GND, 9 VIO, 10 RF2, 11 GND, 12 GND, 13 RF3, 14 GND

## SN74HCS04PW
designator DD?
SN74HCS04 Hex Inverter with Schmitt-Trigger Inputs, TSSOP; Manufacturer: Texas Instruments; PartNumber: SN74HCS04PW; ComponentLink1Description: Product Page; ComponentLink1URL: https://www.ti.com/product/SN74HCS04; ComponentLink2Description: DataSheet; ComponentLink2URL: https://www.ti.com/lit/gpn/sn74hcs04
footprint SOP14P65_500X640X120L62X24N (Small Outline Pkg (SOP), 0.65 mm pitch; 14 pin, 5.00 mm L X 4.35 mm W X 1.20 mm H body)
pins: 1 1A, 2 1Y, 3 2A, 4 2Y, 5 3A, 6 3Y, 7 GND, 8 4Y, 9 4A, 10 5Y, 11 5A, 12 6Y, 13 6A, 14 VCC

## SN74LVCC3245ADBQR
designator DD?
SN74LVCC3245A Octal Bus Transceiver With Adjustable Output Voltage and 3-State Outputs, SSOP; Manufacturer: Texas Insruments; PartNumber: SN74LVCC3245ADBQR; ComponentLink1Description: Product Page; ComponentLink1URL: https://www.ti.com/product/SN74LVCC3245A?HQS=TI-null-null-octopart-df-pf-xrefTI-wwe; ComponentLink2Description: DataSheet; ComponentLink2URL: https://www.ti.com/lit/gpn/sn74lvcc3245a
footprint SOP24P63_865X600X175L65X25N (Small Outline Pkg (SOP), 0.635 mm pitch; 24 pin, 8.65 mm L X 3.90 mm W X 1.75 mm H body)
pins: 1 VCCA, 2 DIR, 3 A1, 4 A2, 5 A3, 6 A4, 7 A5, 8 A6, 9 A7, 10 A8, 11 GND, 12 GND, 13 GND, 14 B8, 15 B7, 16 B6, 17 B5, 18 B4, 19 B3, 20 B2, 21 B1, 22 ~{OE}, 23 NC, 24 VCCB

## SN5438
designator DD?
QUADRUPLE 2-INPUT POSITIVE-NAND BUFFERS WITH OPEN-COLLECTOR OUTPUTS; Manufacturer: Texas Instruments; PartNumber: SN5438; ComponentLink1Description: Product Page; ComponentLink1URL: https://www.ti.com/product/SN5438; ComponentLink2Description: DataSheet; ComponentLink2URL: https://www.ti.com/lit/gpn/sn5438
footprint SOIC14P127_865X600X175L83X41N (Small Outline IC (SOIC), 1.27 mm pitch; 14 pin, 8.65 mm L X 3.90 mm W X 1.75 mm H body)
part A pins: 1 1A, 2 1B, 3 1Y
part B pins: 4 2A, 5 2B, 6 2Y
part C pins: 8 3Y, 9 3A, 10 3B
part D pins: 11 4Y, 12 4A, 13 4B
part E pins: 7 GND, 14 VCC
part A text: NAND
part B text: NAND
part C text: NAND
part D text: NAND

## STM8S003F3P6
designator DD?
Mainstream Value line 8-bit MCU with 8 Kbytes Flash, 16 MHz CPU, integrated EEPROM; Manufacturer: STMicroelectronics; PartNumber: STM8S003F3P6; ComponentLink1Description: Product Page; ComponentLink1URL: https://www.st.com/en/microcontrollers-microprocessors/stm8s003f3.html; ComponentLink2Description: DataSheet; ComponentLink2URL: https://www.st.com/resource/en/datasheet/stm8s003f3.pdf
footprint SOP20P65_650X640X120L60X24N (Small Outline Pkg (SOP), 0.65 mm pitch; 20 pin, 6.50 mm L X 4.40 mm W X 1.20 mm H body)
pins: 1 PD4(HS), 2 PD5(HS), 3 PD6(HS), 4 NRST, 5 PA1, 6 PA2, 7 VSS, 8 VCAP, 9 VDD, 10 PA3(HS), 11 PB5(T), 12 PB4(T), 13 PC3(HS), 14 PC4(HS), 15 PC5(HS), 16 PC6(HS), 17 PC7(HS), 18 PD1(HS), 19 PD2(HS), 20 PD3(HS)

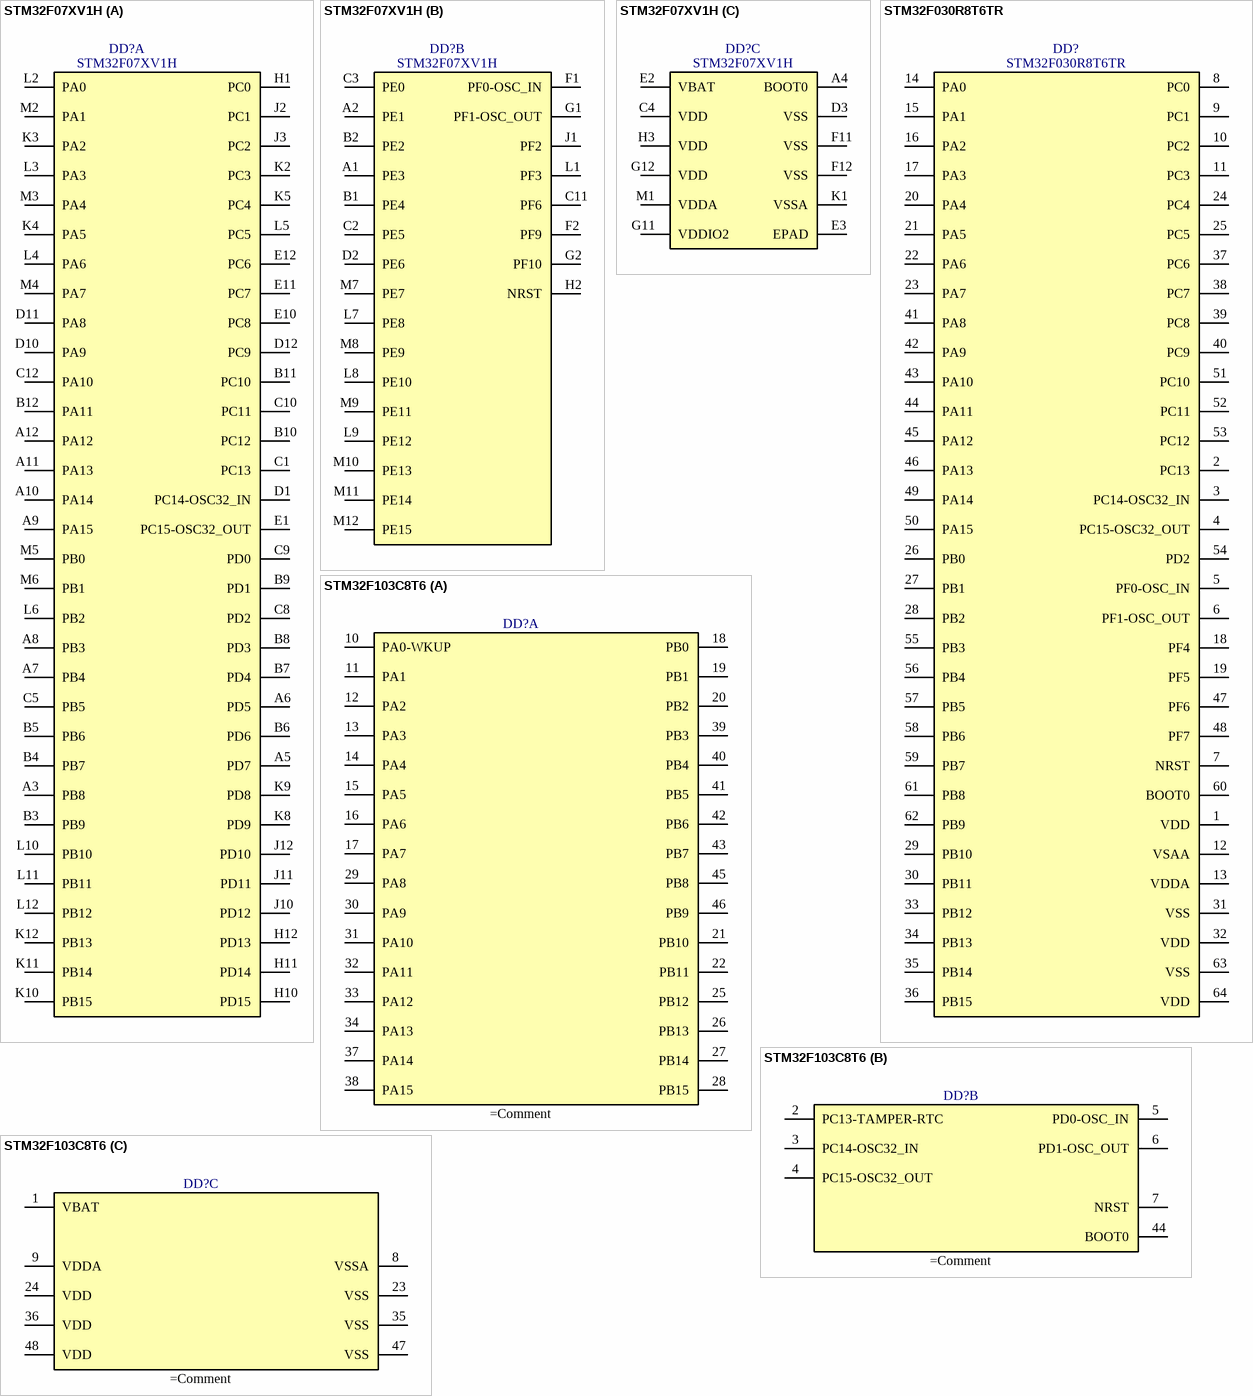
[diagram p18: symbols STM32F07XV1H to STM32F103C8T6]

## STM32F07XV1H
designator DD?
Mainstream ARM Cortex-M0 USB line MCU with 128 Kbytes Flash, 48 MHz CPU, USB, CAN and CEC functions; Manufacturer: STMicroelectronics; PartNumber: STM32F07XV1H; ComponentLink1Description: Product Page; ComponentLink1URL: https://www.st.com/en/microcontrollers-microprocessors/stm32f071v8.html; ComponentLink2Description: DataSheet; ComponentLink2URL: https://www.st.com/resource/en/datasheet/stm32f071v8.pdf
footprint UFBGA100-7x7mm
part A pins: A3 PB8, A5 PD7, A6 PD5, A7 PB4, A8 PB3, A9 PA15, A10 PA14, A11 PA13, A12 PA12, B3 PB9, B4 PB7, B5 PB6, B6 PD6, B7 PD4, B8 PD3, B9 PD1, B10 PC12, B11 PC10, B12 PA11, C1 PC13, C5 PB5, C8 PD2, C9 PD0, C10 PC11, C12 PA10, D1 PC14-OSC32_IN, D10 PA9, D11 PA8, D12 PC9, E1 PC15-OSC32_OUT, E10 PC8, E11 PC7, E12 PC6, H1 PC0, H10 PD15, H11 PD14, H12 PD13, J2 PC1, J3 PC2, J10 PD12, J11 PD11, J12 PD10, K2 PC3, K3 PA2, K4 PA5, K5 PC4, K8 PD9, K9 PD8, K10 PB15, K11 PB14, K12 PB13, L2 PA0, L3 PA3, L4 PA6, L5 PC5, L6 PB2, L10 PB10, L11 PB11, L12 PB12, M2 PA1, M3 PA4, M4 PA7, M5 PB0, M6 PB1
part B pins: A1 PE3, A2 PE1, B1 PE4, B2 PE2, C2 PE5, C3 PE0, C11 PF6, D2 PE6, F1 PF0-OSC_IN, F2 PF9, G1 PF1-OSC_OUT, G2 PF10, H2 NRST, J1 PF2, L1 PF3, L7 PE8, L8 PE10, L9 PE12, M7 PE7, M8 PE9, M9 PE11, M10 PE13, M11 PE14, M12 PE15
part C pins: A4 BOOT0, C4 VDD, D3 VSS, E2 VBAT, E3 EPAD, F11 VSS, F12 VSS, G11 VDDIO2, G12 VDD, H3 VDD, K1 VSSA, M1 VDDA

## STM32F030R8T6TR
designator DD?
Value-line Arm®-based 32-bit MCU with up to 256 KB Flash, timers, / ADC, communication interfaces, 2.4-3.6 V operation; Manufacturer: STMicroelectronics; PartNumber: STM32F030R8T6TR; ComponentLink1Description: Product Page; ComponentLink1URL: https://www.st.com/en/microcontrollers-microprocessors/stm32f030r8.html; ComponentLink2Description: DataSheet; ComponentLink2URL: https://www.st.com/resource/en/datasheet/stm32f030r8.pdf
footprint QFP64P50_1200X1200X160L60X19N (Quad Flat Pack (QFP), 0.50 mm pitch; square, 16 pin X 16 pin, 10.00 mm L X 10.00 mm W X 1.60 mm H body)
pins: 1 VDD, 2 PC13, 3 PC14-OSC32_IN, 4 PC15-OSC32_OUT, 5 PF0-OSC_IN, 6 PF1-OSC_OUT, 7 NRST, 8 PC0, 9 PC1, 10 PC2, 11 PC3, 12 VSAA, 13 VDDA, 14 PA0, 15 PA1, 16 PA2, 17 PA3, 18 PF4, 19 PF5, 20 PA4, 21 PA5, 22 PA6, 23 PA7, 24 PC4, 25 PC5, 26 PB0, 27 PB1, 28 PB2, 29 PB10, 30 PB11, 31 VSS, 32 VDD, 33 PB12, 34 PB13, 35 PB14, 36 PB15, 37 PC6, 38 PC7, 39 PC8, 40 PC9, 41 PA8, 42 PA9, 43 PA10, 44 PA11, 45 PA12, 46 PA13, 47 PF6, 48 PF7, 49 PA14, 50 PA15, 51 PC10, 52 PC11, 53 PC12, 54 PD2, 55 PB3, 56 PB4, 57 PB5, 58 PB6, 59 PB7, 60 BOOT0, 61 PB8, 62 PB9, 63 VSS, 64 VDD

## STM32F103C8T6
designator DD?  (value not drawn)
Mainstream Performance line, Arm Cortex-M3 MCU with 64 Kbytes of Flash memory, 72 MHz CPU, motor control, USB and CAN; Manufacturer: STMicroelectronics; PartNumber: STM32F103C8T6; ComponentLink1Description: Product Page; ComponentLink1URL: https://www.st.com/en/microcontrollers-microprocessors/stm32f103c8.html; ComponentLink2Description: DataSheet; ComponentLink2URL: https://www.st.com/resource/en/datasheet/stm32f103c8.pdf
footprint QFP48P50_900X900X160L60X22N (Quad Flat Pack (QFP), 0.50 mm pitch; square, 12 pin X 12 pin, 7.00 mm L X 7.00 mm W X 1.60 mm H body)
part A pins: 10 PA0-WKUP, 11 PA1, 12 PA2, 13 PA3, 14 PA4, 15 PA5, 16 PA6, 17 PA7, 18 PB0, 19 PB1, 20 PB2, 21 PB10, 22 PB11, 25 PB12, 26 PB13, 27 PB14, 28 PB15, 29 PA8, 30 PA9, 31 PA10, 32 PA11, 33 PA12, 34 PA13, 37 PA14, 38 PA15, 39 PB3, 40 PB4, 41 PB5, 42 PB6, 43 PB7, 45 PB8, 46 PB9
part B pins: 2 PC13-TAMPER-RTC, 3 PC14-OSC32_IN, 4 PC15-OSC32_OUT, 5 PD0-OSC_IN, 6 PD1-OSC_OUT, 7 NRST, 44 BOOT0
part C pins: 1 VBAT, 8 VSSA, 9 VDDA, 23 VSS, 24 VDD, 35 VSS, 36 VDD, 47 VSS, 48 VDD

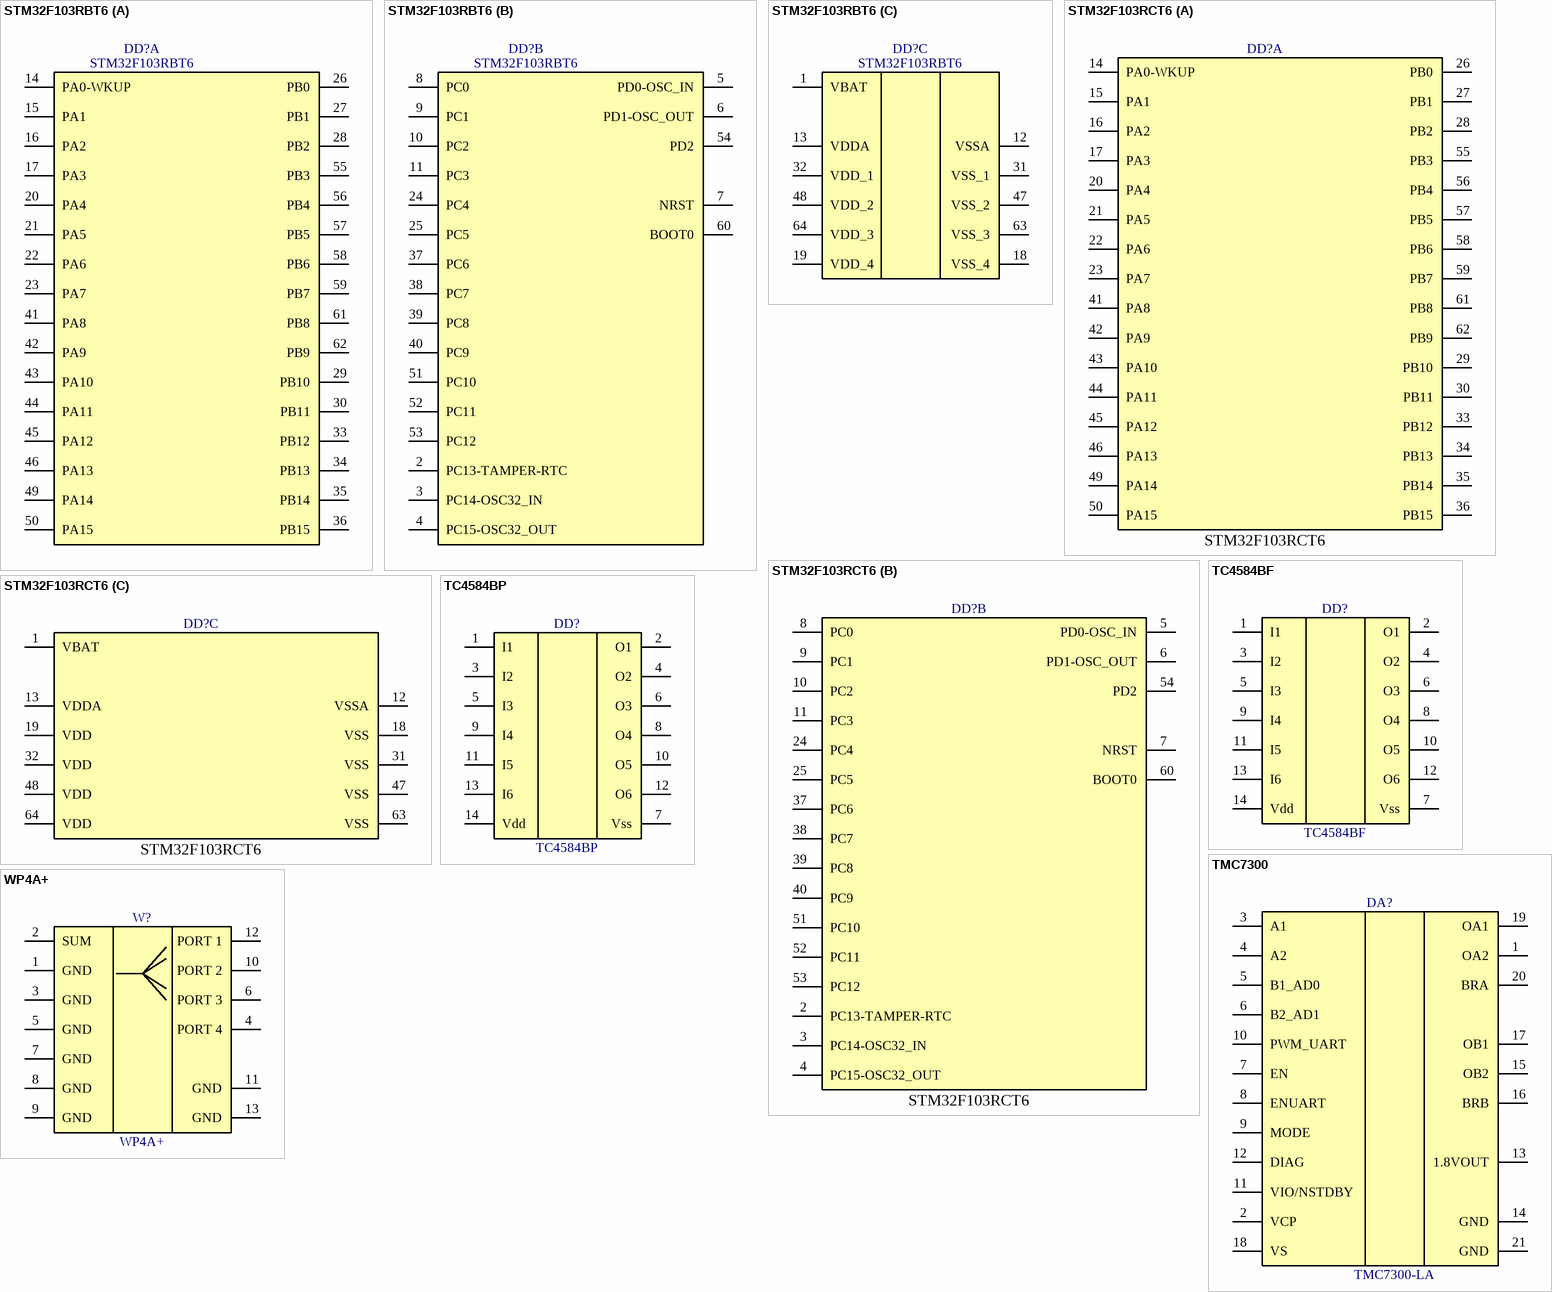
[diagram p19: symbols STM32F103RBT6 to WP4A+]

## STM32F103RBT6
designator DD?
Medium-density performance line Arm®-based 32-bit MCU with 64 or 128 KB Flash, USB, CAN, 7 timers, 2 ADCs, 9 com. interfaces; Manufacturer: STMicroelectronics; PartNumber: STM32F103RBT6; ComponentLink1Description: Product Page; ComponentLink1URL: https://www.st.com/en/microcontrollers-microprocessors/stm32f103rb.html; ComponentLink2Description: DataSheet; ComponentLink2URL: https://www.st.com/resource/en/datasheet/stm32f103rb.pdf
footprint QFP64P50_1200X1200X160L60X19N (Quad Flat Pack (QFP), 0.50 mm pitch; square, 16 pin X 16 pin, 10.00 mm L X 10.00 mm W X 1.60 mm H body)
part A pins: 14 PA0-WKUP, 15 PA1, 16 PA2, 17 PA3, 20 PA4, 21 PA5, 22 PA6, 23 PA7, 26 PB0, 27 PB1, 28 PB2, 29 PB10, 30 PB11, 33 PB12, 34 PB13, 35 PB14, 36 PB15, 41 PA8, 42 PA9, 43 PA10, 44 PA11, 45 PA12, 46 PA13, 49 PA14, 50 PA15, 55 PB3, 56 PB4, 57 PB5, 58 PB6, 59 PB7, 61 PB8, 62 PB9
part B pins: 2 PC13-TAMPER-RTC, 3 PC14-OSC32_IN, 4 PC15-OSC32_OUT, 5 PD0-OSC_IN, 6 PD1-OSC_OUT, 7 NRST, 8 PC0, 9 PC1, 10 PC2, 11 PC3, 24 PC4, 25 PC5, 37 PC6, 38 PC7, 39 PC8, 40 PC9, 51 PC10, 52 PC11, 53 PC12, 54 PD2, 60 BOOT0
part C pins: 1 VBAT, 12 VSSA, 13 VDDA, 18 VSS_4, 19 VDD_4, 31 VSS_1, 32 VDD_1, 47 VSS_2, 48 VDD_2, 63 VSS_3, 64 VDD_3

## STM32F103RCT6
designator DD?  (value not drawn)
Mainstream Performance line, Arm Cortex-M3 MCU with 256 Kbytes of Flash memory, 72 MHz CPU, motor control, USB and CAN; Manufacturer: STMicroelectronics; PartNumber: STM32F103RCT6; ComponentLink1Description: Product Page; ComponentLink1URL: https://www.st.com/en/microcontrollers-microprocessors/stm32f103rc.html; ComponentLink2Description: DataSheet; ComponentLink2URL: https://www.st.com/resource/en/datasheet/stm32f103rc.pdf
footprint QFP64P50_1200X1200X160L60X19N (Quad Flat Pack (QFP), 0.50 mm pitch; square, 16 pin X 16 pin, 10.00 mm L X 10.00 mm W X 1.60 mm H body)
part A pins: 14 PA0-WKUP, 15 PA1, 16 PA2, 17 PA3, 20 PA4, 21 PA5, 22 PA6, 23 PA7, 26 PB0, 27 PB1, 28 PB2, 29 PB10, 30 PB11, 33 PB12, 34 PB13, 35 PB14, 36 PB15, 41 PA8, 42 PA9, 43 PA10, 44 PA11, 45 PA12, 46 PA13, 49 PA14, 50 PA15, 55 PB3, 56 PB4, 57 PB5, 58 PB6, 59 PB7, 61 PB8, 62 PB9
part B pins: 2 PC13-TAMPER-RTC, 3 PC14-OSC32_IN, 4 PC15-OSC32_OUT, 5 PD0-OSC_IN, 6 PD1-OSC_OUT, 7 NRST, 8 PC0, 9 PC1, 10 PC2, 11 PC3, 24 PC4, 25 PC5, 37 PC6, 38 PC7, 39 PC8, 40 PC9, 51 PC10, 52 PC11, 53 PC12, 54 PD2, 60 BOOT0
part C pins: 1 VBAT, 12 VSSA, 13 VDDA, 18 VSS, 19 VDD, 31 VSS, 32 VDD, 47 VSS, 48 VDD, 63 VSS, 64 VDD

## TC4584BF
designator DD?
TC4584B Hex Schmitt Trigger 6 chanel, SOIC; Manufacturer: Toshiba; PartNumber: TC4584BF; ComponentLink1Description: Product Page; ComponentLink1URL: https://toshiba.semicon-storage.com/eu/semiconductor/product/general-purpose-logic-ics/detail.TC4584BF.html; ComponentLink2Description: DataSheet; ComponentLink2URL: https://toshiba.semicon-storage.com/info/docget.jsp?did=20900&prodName=TC4584BF
footprint SOIC14P127_1080X780X190L80X44N (Small Outline IC (SOIC), 1.27 mm pitch; 14 pin, 10.80 mm L X 5.30 mm W X 1.90 mm H body)
pins: 1 I1, 2 O1, 3 I2, 4 O2, 5 I3, 6 O3, 7 Vss, 8 O4, 9 I4, 10 O5, 11 I5, 12 O6, 13 I6, 14 Vdd

## TC4584BP
designator DD?
TC4584B Hex Schmitt Trigger 6 chanel, DIP; Manufacturer: Toshiba; PartNumber: TC4584BP; ComponentLink1Description: Product Page; ComponentLink1URL: https://toshiba.semicon-storage.com/eu/semiconductor/product/general-purpose-logic-ics/detail.TC4584BF.html; ComponentLink2Description: DataSheet; ComponentLink2URL: https://toshiba.semicon-storage.com/info/docget.jsp?did=20900&prodName=TC4584BF
footprint TOSHIBA DIP14-P-300-2.54 (DIP, 7.62 mm lead span, 2.54 mm pitch; 14 pin, 19.75 mm L X 6.60 mm W X 4.45 mm H body)
pins: 1 I1, 2 O1, 3 I2, 4 O2, 5 I3, 6 O3, 7 Vss, 8 O4, 9 I4, 10 O5, 11 I5, 12 O6, 13 I6, 14 Vdd

## TMC7300
designator DA?, comment TMC7300-LA
Low Voltage Driver for One or Two DC Motors up to 2A (2.4A) peak – UART based Control for Torque / and Velocity. 4 Half Bridge Peripheral Driver Option.; Manufacturer: Analog Devices; PartNumber: TMC7300-LA; ComponentLink1Description: Product Page; ComponentLink1URL: https://www.analog.com/en/products/tmc7300.html; ComponentLink2Description: DataSheet; ComponentLink2URL: https://www.analog.com/media/en/technical-documentation/data-sheets/TMC7300_datasheet_rev1.08.pdf
footprint QFN21P40_300X300X90L40X20T170N (Quad Flat No-Lead (QFN with Tab), 0.40 mm pitch; square, 5 pin X 5 pin, 3.00 mm L X 3.00 mm W X 0.90 mm H body)
pins: 1 OA2, 2 VCP, 3 A1, 4 A2, 5 B1_AD0, 6 B2_AD1, 7 EN, 8 ENUART, 9 MODE, 10 PWM_UART, 11 VIO/NSTDBY, 12 DIAG, 13 1.8VOUT, 14 GND, 15 OB2, 16 BRB, 17 OB1, 18 VS, 19 OA1, 20 BRA, 21 GND

## WP4A+
designator W?
4 Ways MMIC Power Splitter, 5100 - 6500 MHz, 50Ω; manufacturer: Mini-Circuits; PartNumber: WP4A+; ComponentLink1Description: Product Page; ComponentLink1URL: https://www.minicircuits.com/WebStore/dashboard.html?model=WP4A%2B; ComponentLink2Description: DataSheet; ComponentLink2URL: https://www.minicircuits.com/WebStore/dashboardPdf?model=WP4A%2B
footprint DQ1225 (Mini-Circuits case DQ1225)
pins: 1 GND, 2 SUM, 3 GND, 4 PORT 4, 5 GND, 6 PORT 3, 7 GND, 8 GND, 9 GND, 10 PORT 2, 11 GND, 12 PORT 1, 13 GND


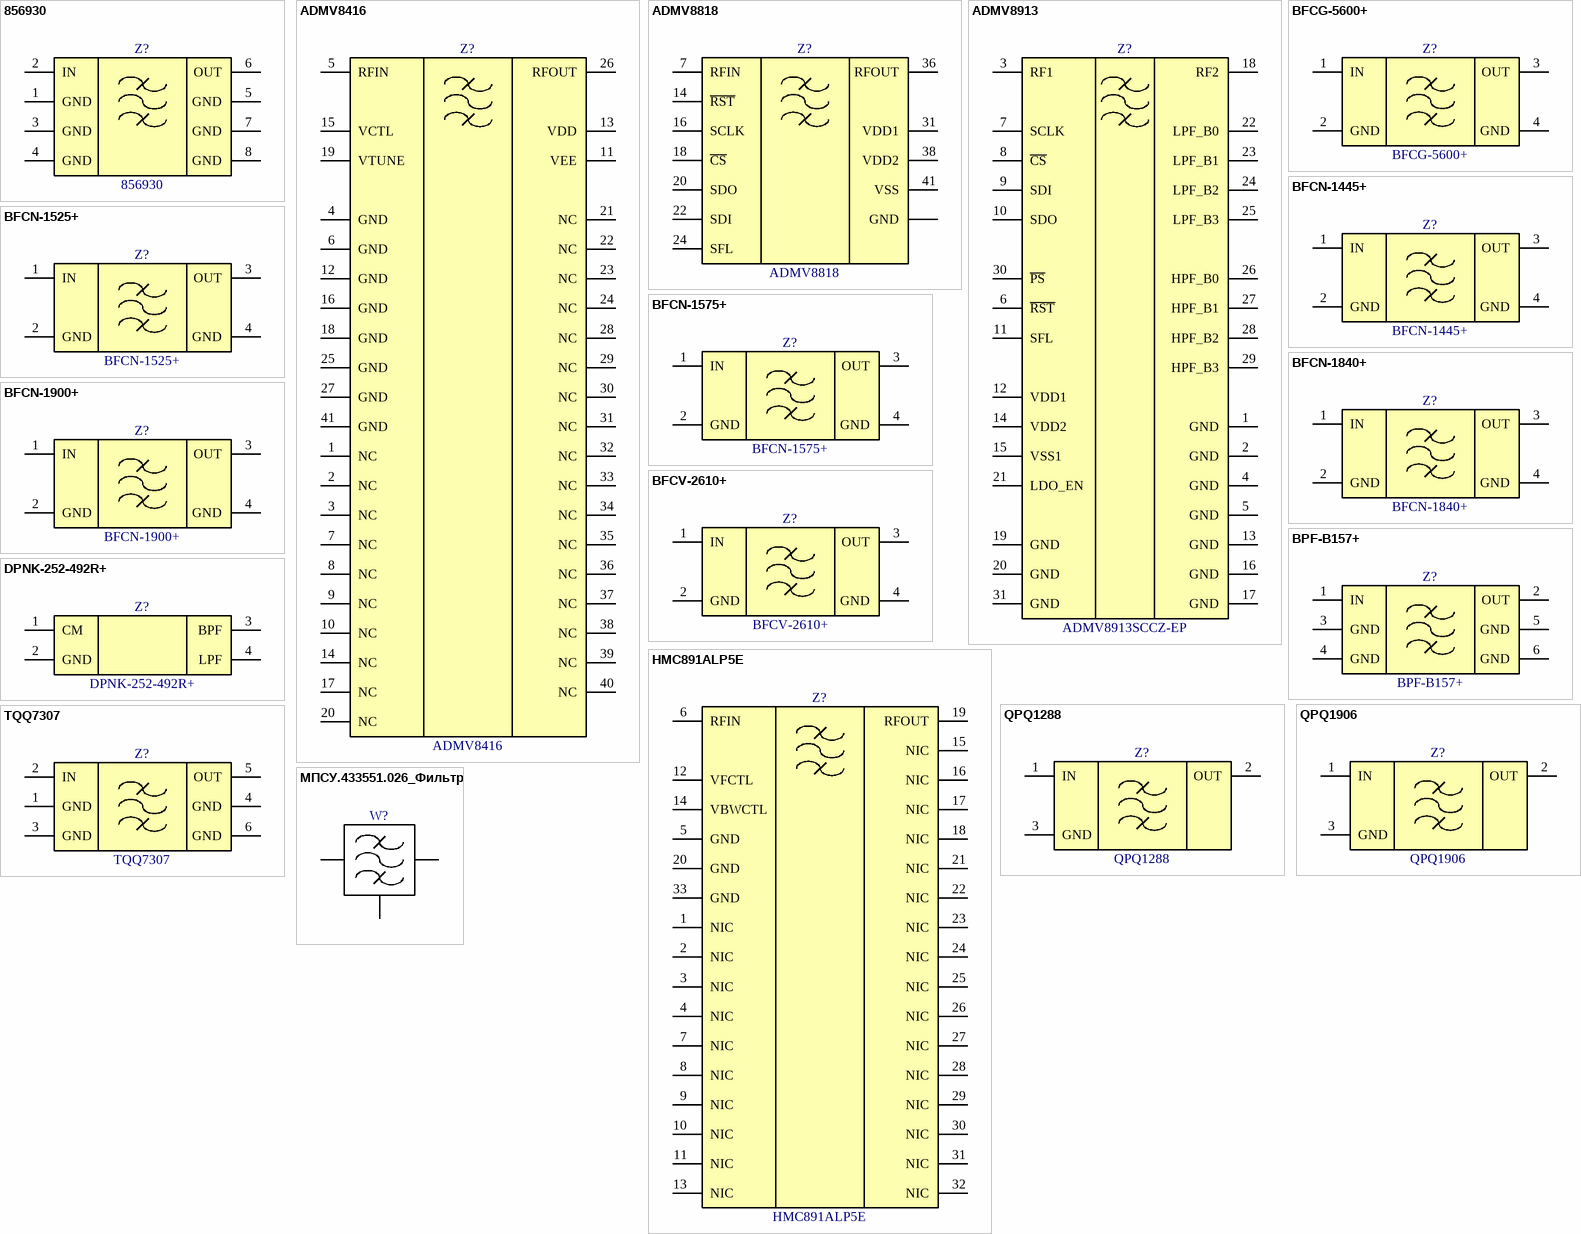
[diagram p20: symbols 856930 to МПСУ.433551.026_Фильтр]

## 856930
designator Z?
457.5 MHz SAW Filter; Manufacturer: Qorvo; PartNumber: 856930; ComponentLink1Description: Product Page; ComponentLink1URL: https://www.qorvo.com/products/p/856930; ComponentLink2Description: DataSheet; ComponentLink2URL: https://www.qorvo.com/products/d/da003067
footprint 856930 (Leadless Chip Carrier (LCC), 1.27 mm pitch; square, 3 pin X 1 pin, 3.80 mm L X 3.80 mm W X 1.45 mm H body)
pins: 1 GND, 2 IN, 3 GND, 4 GND, 5 GND, 6 OUT, 7 GND, 8 GND

## ADMV8416
designator Z?
6.3 GHz to 18 GHz, Tunable Band-Pass Filter; Manufacturer: Analog Devices; PartNumber: ADMV8416; ComponentLink1Description: Product Page; ComponentLink1URL: https://www.analog.com/en/products/admv8416.html; ComponentLink2Description: DataSheet; ComponentLink2URL: https://www.analog.com/media/en/technical-documentation/data-sheets/admv8416.pdf
footprint QFN41P50_600X600X80L30X25T470N (Quad Flat No-Lead (QFN with Tab), 0.50 mm pitch; square, 10 pin X 10 pin, 6.00 mm L X 6.00 mm W X 0.80 mm H body)
pins: 1 NC, 2 NC, 3 NC, 4 GND, 5 RFIN, 6 GND, 7 NC, 8 NC, 9 NC, 10 NC, 11 VEE, 12 GND, 13 VDD, 14 NC, 15 VCTL, 16 GND, 17 NC, 18 GND, 19 VTUNE, 20 NC, 21 NC, 22 NC, 23 NC, 24 NC, 25 GND, 26 RFOUT, 27 GND, 28 NC, 29 NC, 30 NC, 31 NC, 32 NC, 33 NC, 34 NC, 35 NC, 36 NC, 37 NC, 38 NC, 39 NC, 40 NC, 41 GND

## ADMV8818
designator Z?
2 GHz to 18 GHz, Digitally Tunable, / High-Pass and Low-Pass Filter; Manufacturer: Analog Devices; PartNumber: ADMV8818; ComponentLink1Description: Product Page; ComponentLink1URL: https://www.analog.com/en/products/admv8818.html; ComponentLink2Description: DataSheet; ComponentLink2URL: https://www.analog.com/media/en/technical-documentation/data-sheets/admv8818-ep.pdf
footprint QFN50P900X900X103_HS-57N (QFN, 56-Leads, Body 9.00x9.00mm, Pitch 0.50mm, Thermal Pad 6.40x6.40mm, IPC Medium Density)
pins: 1, 2, 3, 4, 5, 6, 8, 9, 10, 11, 12, 13, 15, 17, 19, 21, 23, 25, 26, 27, 28, 29, 30, 32, 33, 34, 35, 37, 38, 40, 42, 43, 44, 45, 46, 47, 48, 49, 50, 51, 52, 53, 54, 55, 56, 57 GND, 7 RFIN, 14 ~{RST}, 16 SCLK, 18 ~{CS}, 20 SDO, 22 SDI, 24 SFL, 31 VDD1, 36 RFOUT, 38 VDD2, 41 VSS

## ADMV8913
designator Z?, comment ADMV8913SCCZ-EP
X Band, Digitally Tunable, High-Pass Filter and Low-Pass Filter; Manufacturer: Analog Devices; PartNumber: ADMV8913SCCZ-EP; ComponentLink1Description: Product Page; ComponentLink1URL: https://www.analog.com/en/products/admv8913.html; ComponentLink2Description: DataSheet; ComponentLink2URL: https://www.analog.com/media/en/technical-documentation/data-sheets/admv8913-ep.pdf
footprint AD LGA CC-30-4 (Analog Devices 30-Terminal Land Grid Array Package [LGA] (CC-30-4))
pins: 1 GND, 2 GND, 3 RF1, 4 GND, 5 GND, 6 ~{RST}, 7 SCLK, 8 ~{CS}, 9 SDI, 10 SDO, 11 SFL, 12 VDD1, 13 GND, 14 VDD2, 15 VSS1, 16 GND, 17 GND, 18 RF2, 19 GND, 20 GND, 21 LDO_EN, 22 LPF_B0, 23 LPF_B1, 24 LPF_B2, 25 LPF_B3, 26 HPF_B0, 27 HPF_B1, 28 HPF_B2, 29 HPF_B3, 30 ~{PS}, 31 GND

## BFCG-5600+
designator Z?
LTCC Band Pass Filter, 5150 - 5990 MHz, 50Ω; Manufacturer: Mini-Circuits; PartNumber: BFCG-5600+; ComponentLink1Description: Product Page; ComponentLink1URL: https://www.minicircuits.com/WebStore/dashboard.html?model=BFCG-5600%2B; ComponentLink2Description: DataSheet; ComponentLink2URL: https://www.minicircuits.com/WebStore/dashboardPdf?model=BFCG-5600%2B
footprint GE0805C-3 (Mini-Circuits case GE0805C-3)
pins: 1 IN, 2 GND, 3 OUT, 4 GND

## BFCN-1445+
designator Z?
Bandpass Filter 50Ω 1420 to 1470 MHz; Manufacturer: Mini-Circuits; PartNumber: BFCN-1445+; ComponentLink1Description: Product Page; ComponentLink1URL: https://www.minicircuits.com/WebStore/dashboard.html?model=BFCN-1445%2B; ComponentLink2Description: DataSheet; ComponentLink2URL: https://www.minicircuits.com/WebStore/dashboardPdf?model=BFCN-1445%2B
footprint FV1206 (Mini-Circuits case FV1206)
pins: 1 IN, 2 GND, 3 OUT, 4 GND

## BFCN-1525+
designator Z?
Bandpass Filter 50Ω 1480 to 1570 MHz; Manufacturer: Mini-Circuits; PartNumber: BFCN-1525+; ComponentLink1Description: Product Page; ComponentLink1URL: https://www.minicircuits.com/WebStore/dashboard.html?model=BFCN-1525%2B; ComponentLink2Description: DataSheet; ComponentLink2URL: https://www.minicircuits.com/WebStore/dashboardPdf?model=BFCN-1525%2B
footprint FV1206 (Mini-Circuits case FV1206)
pins: 1 IN, 2 GND, 3 OUT, 4 GND

## BFCN-1575+
designator Z?
Bandpass Filter 50Ω 1530 to 1620 MHz; Manufacturer: Mini-Circuits; PartNumber: BFCN-1575+; ComponentLink1Description: Product Page; ComponentLink1URL: https://www.minicircuits.com/WebStore/dashboard.html?model=BFCN-1575%2B; ComponentLink2Description: DataSheet; ComponentLink2URL: https://www.minicircuits.com/WebStore/dashboardPdf?model=BFCN-1575%2B
footprint FV1206 (Mini-Circuits case FV1206)
pins: 1 IN, 2 GND, 3 OUT, 4 GND

## BFCN-1840+
designator Z?
Bandpass Filter 50Ω 1750 to 1930 MHz; Manufacturer: Mini-Circuits; PartNumber: BFCN-1840+; ComponentLink1Description: Product Page; ComponentLink1URL: https://www.minicircuits.com/WebStore/dashboard.html?model=BFCN-1840%2B; ComponentLink2Description: DataSheet; ComponentLink2URL: https://www.minicircuits.com/WebStore/dashboardPdf?model=BFCN-1840%2B
footprint FV1206 (Mini-Circuits case FV1206)
pins: 1 IN, 2 GND, 3 OUT, 4 GND

## BFCN-1900+
designator Z?
Bandpass Filter 50Ω 1893 to 1920 MHz; Manufacturer: Mini-Circuits; PartNumber: BFCN-1900+; ComponentLink1Description: Product Page; ComponentLink1URL: https://www.minicircuits.com/WebStore/dashboard.html?model=BFCN-1900%2B; ComponentLink2Description: DataSheet; ComponentLink2URL: https://www.minicircuits.com/WebStore/dashboardPdf?model=BFCN-1900%2B
footprint FV1206-5 (Mini-Circuits case FV1206-5)
pins: 1 IN, 2 GND, 3 OUT, 4 GND

## BFCV-2610+
designator Z?
Ceramic LTCC Bandpass Filter 50Ω 2000 to 3220 MHz; Manufacturer: Mini-Circuits; PartNumber: BFCV-2610+; ComponentLink1Description: Product Page; ComponentLink1URL: https://www.minicircuits.com/WebStore/dashboard.html?model=BFCV-2610%2B; ComponentLink2Description: DataSheet; ComponentLink2URL: https://www.minicircuits.com/WebStore/dashboardPdf?model=BFCV-2610%2B
footprint JV1210C (Mini-Circuits CASE JV1210C)
pins: 1 IN, 2 GND, 3 OUT, 4 GND

## BPF-B157+
designator Z?
Bandpass Filter 50Ω 151 to 163 MHz; Manufacturer: Mini-Circuits; PartNumber: BPF-B157+; ComponentLink1Description: Product Page; ComponentLink1URL: https://www.minicircuits.com/WebStore/dashboard.html?model=BPF-B157%2B; ComponentLink2Description: DataSheet; ComponentLink2URL: https://www.minicircuits.com/WebStore/dashboardPdf?model=BPF-B157%2B
footprint HZ1198 (Mini-Circuits CASE HZ1198)
pins: 1 IN, 2 OUT, 3 GND, 4 GND, 5 GND, 6 GND

## DPNK-252-492R+
designator Z?
LTCC Diplexer, 2400-2500/5150-5850 MHz, 50Ω; Manufacturer: Mini-Circuits; PartNumber: DPNK-252-492R+; ComponentLink1Description: Product Page; ComponentLink1URL: https://www.minicircuits.com/WebStore/dashboard.html?model=DPNK-252-492R%2B; ComponentLink2Description: DataSheet; ComponentLink2URL: https://www.minicircuits.com/WebStore/dashboardPdf?model=DPNK-252-492R%2B
footprint NK0402C (Mini-Circuits case NK0402C)
pins: 1 CM, 2 GND, 3 BPF, 4 LPF

## HMC891ALP5E
designator Z?
1.95 GHz to 3.4 GHz, Tunable Band-Pass Filter; Manufacturer: Analog Devices; PartNumber: HMC891ALP5E; ComponentLink1Description: Product Page; ComponentLink1URL: https://www.analog.com/en/products/hmc891a.html; ComponentLink2Description: DataSheet; ComponentLink2URL: https://www.analog.com/media/en/technical-documentation/data-sheets/HMC891ALP5E.pdf
footprint QFN33P50_500X500X80L40X24T365N (Quad Flat No-Lead (QFN with Tab), 0.50 mm pitch; square, 8 pin X 8 pin, 5.00 mm L X 5.00 mm W X 0.80 mm H body)
pins: 1 NIC, 2 NIC, 3 NIC, 4 NIC, 5 GND, 6 RFIN, 7 NIC, 8 NIC, 9 NIC, 10 NIC, 11 NIC, 12 VFCTL, 13 NIC, 14 VBWCTL, 15 NIC, 16 NIC, 17 NIC, 18 NIC, 19 RFOUT, 20 GND, 21 NIC, 22 NIC, 23 NIC, 24 NIC, 25 NIC, 26 NIC, 27 NIC, 28 NIC, 29 NIC, 30 NIC, 31 NIC, 32 NIC, 33 GND

## QPQ1288
designator Z?
2345 MHz BAW Filter; Manufacturer: Qorvo; PartNumber: QPQ1288; ComponentLink1Description: Product Page; ComponentLink1URL: https://www.qorvo.com/products/p/QPQ1288; ComponentLink2Description: DataSheet; ComponentLink2URL: https://www.qorvo.com/products/d/da003676
footprint QPQ1288 (Qorvo QPQ1288)
pins: 1 IN, 2 OUT, 3 GND

## QPQ1906
designator Z?
Wi-Fi/IoTbandBoostFilter; Manufacturer: Qorvo; PartNumber: QPQ1906; ComponentLink1Description: Product Page; ComponentLink1URL: https://www.qorvo.com/products/p/QPQ1906; ComponentLink2Description: DataSheet; ComponentLink2URL: https://www.qorvo.com/products/d/da007259
footprint QPQ1906 (Qorvo QPQ1906)
pins: 1 IN, 2 OUT, 3 GND

## TQQ7307
designator Z?
2535 MHz LTE Band 7 Uplink BAW Filter; Manufacturer: Qorvo; PartNumber: TQQ7307; ComponentLink1Description: Product Page; ComponentLink1URL: https://www.qorvo.com/products/p/TQQ7307; ComponentLink2Description: DataSheet; ComponentLink2URL: https://www.qorvo.com/products/d/da005808
footprint PSON6P110_300X300X109L65X60N (Pullback Small Outline No-Lead (PSON), 1.10 mm pitch; 6 pin, 3.00 mm L X 3.00 mm W X 1.09 mm H body)
pins: 1 GND, 2 IN, 3 GND, 4 GND, 5 OUT, 6 GND

## МПСУ.433551.026_Фильтр
designator W?, comment FilterZigzag  (value not drawn)  (net tie, no BOM)
Фильтр пъезокерамичсекий, полоснопропускающий, 5,2..5,7 ГГц; PartNumber: МПСУ.433551.026
footprint МПСУ.433551.026_Фильтр (Фильтр пъезокерамичсекий, полоснопропускающий, 5,2..5,7 ГГц)
pins: 1, 2, 3


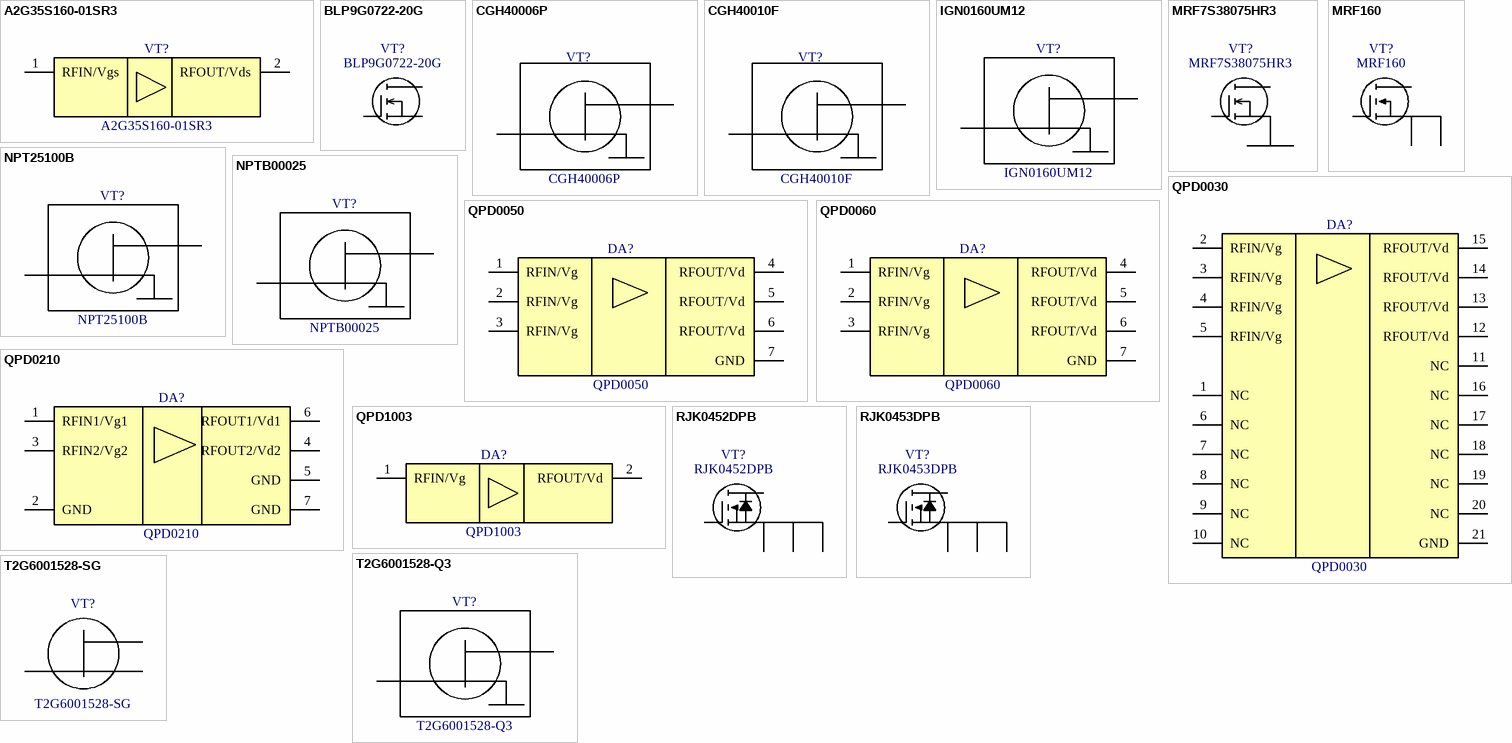
[diagram p21: symbols A2G35S160-01SR3 to T2G6001528-SG]

## A2G35S160-01SR3
designator VT?
RF Power GaN Transistor; Manufacturer: NXP; PartNumber: A2G35S160-01SR3; ComponentLink1Description: Product Page; ComponentLink1URL: https://www.nxp.com/part/A2G35S160-01S#/; ComponentLink2Description: DataSheet; ComponentLink2URL: https://www.nxp.com/docs/en/data-sheet/A2G35S160-01S.pdf
footprint SOT1828-1 (NXP CASE SOT1828-1)
pins: 1 RFIN/Vgs, 2 RFOUT/Vds

## BLP9G0722-20G
designator VT?
20 W plastic LDMOS power transistor for base station applications at frequencies from 100 MHz to 2700 MHz; Manufacturer: Ampleon; PartNumber: BLP9G0722-20G; ComponentLink1Description: Product Page; ComponentLink1URL: https://www.ampleon.com/products/mobile-broadband/0.4-1.0-ghz-transistors/BLP9G0722-20G.html; ComponentLink2Description: DataSheet; ComponentLink2URL: https://www.ampleon.com/documents/data-sheet/BLP9G0722-20_9G0722-20G.PDF
footprint Ampleon SOT1483-1 (plastic; heatsink small outline package; 2 leads)
pins: 1 D, 2 G, 3 S

## CGH40006P
designator VT?
6W RF Power GaN HEMT DC-6GHz 28V; Manufacturer: MACOM; PartNumber: CGH40006P; ComponentLink1Description: Product Page; ComponentLink1URL: https://www.macom.com/products/product-detail/CGH40006S
footprint WolfSpeed 440109 (Package Type 440109 Pill Transistor)
pins: 1 G, 2 D

## CGH40010F
designator VT?
10W RF Power GaN HEMT DC-6GHz 28V; Manufacturer: MACOM; PartNumber: CGH40010F; ComponentLink1Description: Product Page; ComponentLink1URL: https://www.macom.com/products/product-detail/CGH40010
footprint WOLFSPEED 440166 (Package Type 440166 Flange Transistor)
pins: 1 G, 2 D

## IGN0160UM12
designator VT?
C-Band, GaN/SiC, RF Power Transistor 0.1 - 6 GHz  |  12W typ |  55% Efficiency typ |  17dB Gain typ | 50 V | CW; Manufacturer: Integra; PartNumber: IGN0160UM12; ComponentLink1Description: Product Page; ComponentLink2Description: DataSheet; ComponentLink1URL: https://www.integratech.com/gantransistors/ign0160um12; ComponentLink2URL: https://www.integratech.com/_files/ugd/3748d3_64a9db3224f74f57b690af20c6061ec3.pdf
footprint IGN0160UM12 (Integra PACKAGE PL21A1)
pins: D, G

## MRF7S38075HR3
designator VT?
3400-3600 MHz, 12 W Avg., 30 V WiMAX Lateral N-Channel RF Power MOSFET; Manufacturer: NXP; PartNumber: MRF7S38075HR3; ComponentLink1Description: Product Page; ComponentLink1URL: https://www.nxp.com/products/radio-frequency/macro-remote-radio-head/3400-3700-mhz/3400-3600-mhz-12-w-avg-30-v-wimax-lateral-n-channel-rf-power-mosfets:MRF7S38075H; ComponentLink2Description: DataSheet; ComponentLink2URL: https://www.nxp.com/docs/en/data-sheet/MRF7S38075H.pdf
footprint NXP CASE 465-06 STYLE 1 (NXP Flange with screws)
pins: 1 D, 2 G